# Altium integrated library GPDSE.IntLib: 426 symbols (part 2 of 5)
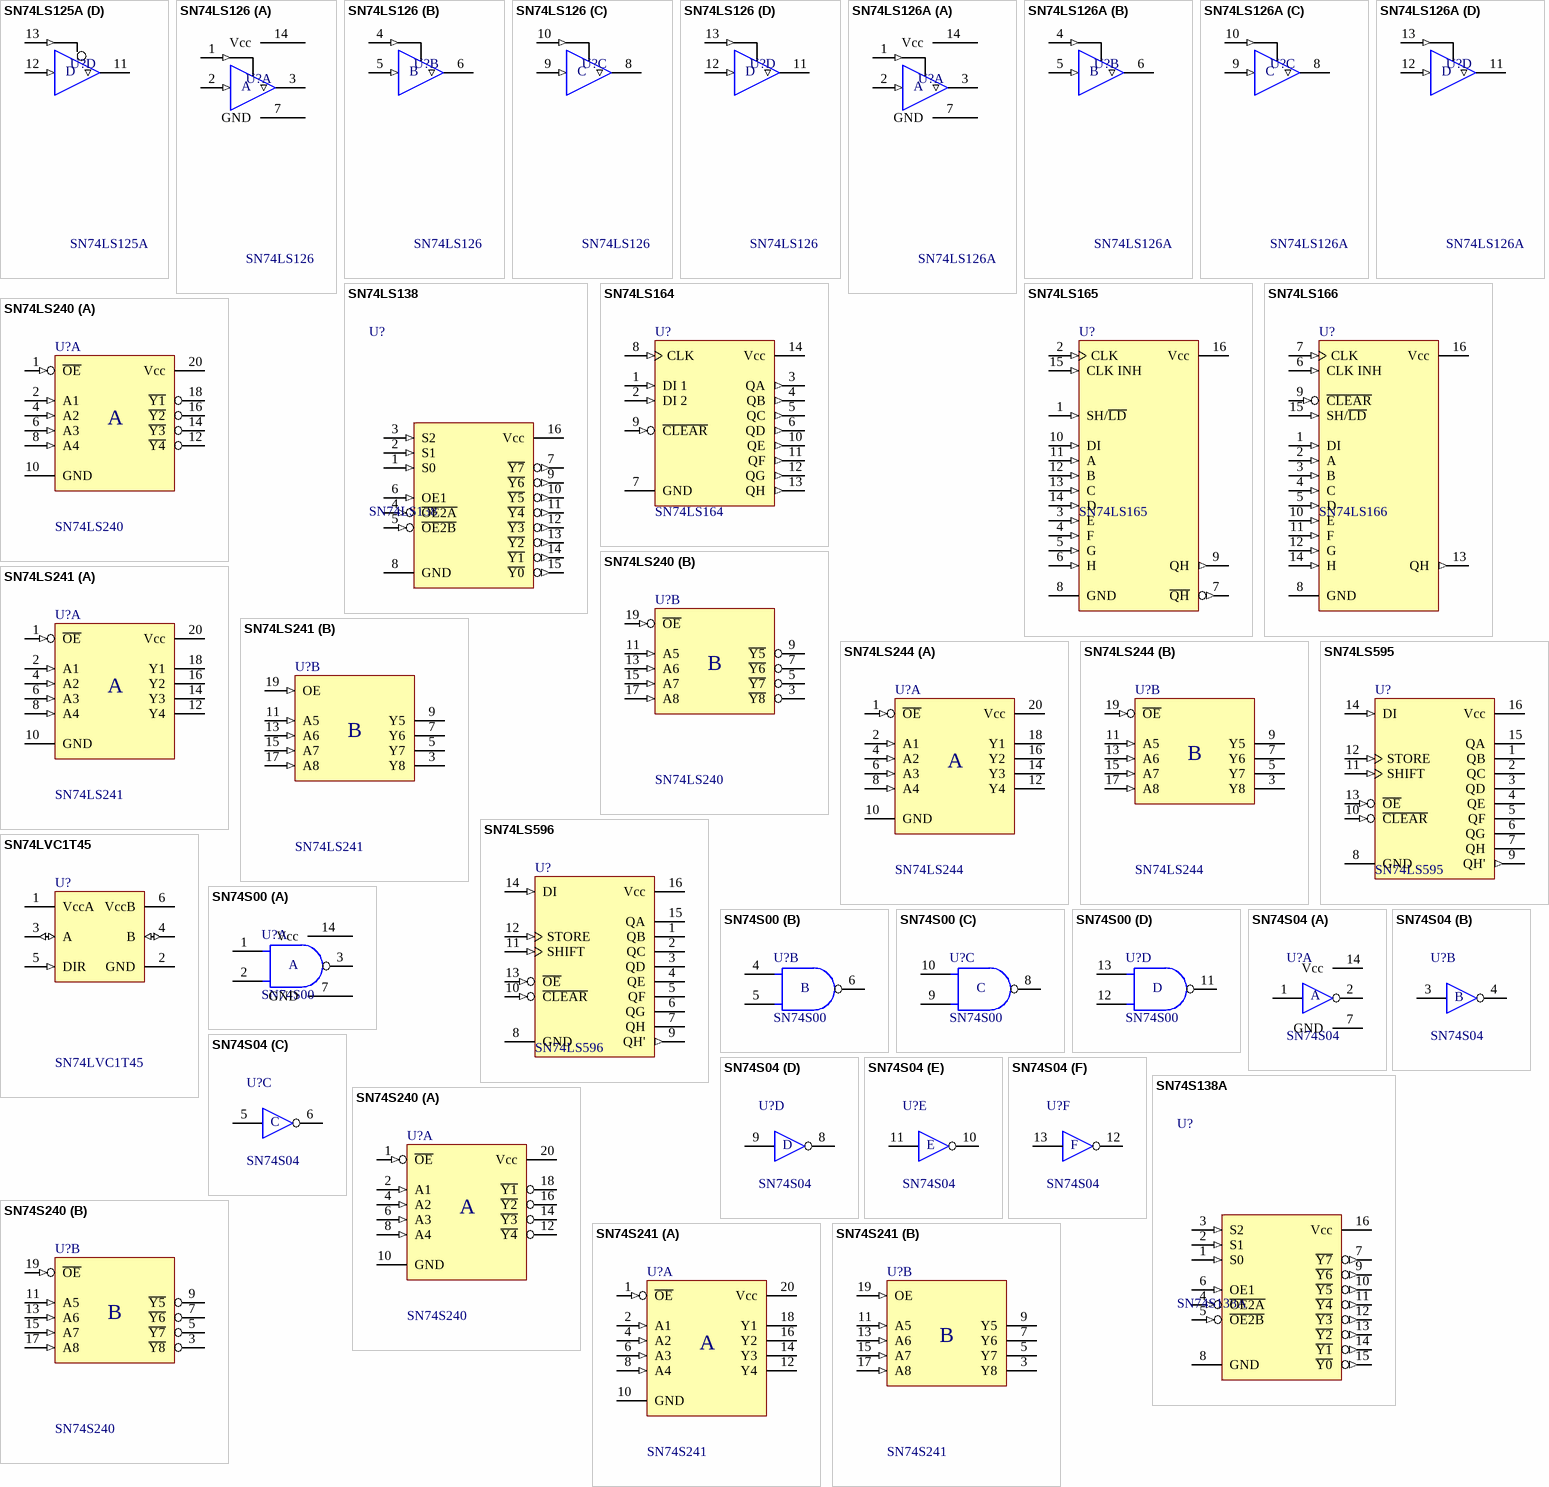
[diagram p27: symbols SN74LS125A to SN74S241]

## SN74LS166
designator U?
Parallel-Load 8-bit Shift Registers; Supply Voltage (Vcc): 4.75 to 5.25 V; Input Voltage (Vi): 0 to Vcc; Output High Current (Ioh): -0.8 mA; Output Low Current (Iol): 8 mA; Clock Frequency (fclock): 25 MHz; Output Voltage (Vo): 0 to Vcc
footprint DIP16-300(100) (DIP, 16-Leads, Row Spacing 7.62mm, Pitch 2.54mm, Body 22.86x6.35mm)
footprint SOIC16-150(50) (SOIC 16 Leads; Row Spacing 3.81 mm; Pitch 1.27 mm; 3D André L´Hérault)
footprint SOP16-5.3mm(1.27mm) (Small Outline Package 16 pin)
pins: 1 DI (in), 2 A (in), 3 B (in), 4 C (in), 5 D (in), 6 CLK INH (in), 7 CLK (in), 8 GND (power), 9 ~{CLEAR} (in), 10 E (in), 11 F (in), 12 G (in), 13 QH (out), 14 H (in), 15 SH/~{LD} (in), 16 Vcc (power)

## SN74LS240
designator U?
Octal Buffer/Driver with 3-State Outputs; Supply Voltage (Vcc): 4.75 to 5.25 V; Input Voltage (Vi): 0 to Vcc; Output High Current (Ioh): -15 mA; Output Low Current (Iol): 24 mA; Propagation Delay (tpd): 12ns; Output Voltage (Vo): 0 to Vcc
footprint SOIC20-300(50) (SOIC 20 Leads; Row Spacing 7.62 mm; Pitch 1.27 mm; 3D André L´Hérault)
footprint SOP20-5.3mm(1.27mm) (Footprint not found)
footprint DIP20-300(100) (Footprint not found)
footprint SOP20-5.3mm(0.65mm) (Small Outline Package 20 pin)
part A pins: 1 ~{OE} (in), 2 A1 (in), 4 A2 (in), 6 A3 (in), 8 A4 (in), 10 GND (power), 12 ~{Y4} (hiz), 14 ~{Y3} (hiz), 16 ~{Y2} (hiz), 18 ~{Y1} (hiz), 20 Vcc (power)
part B pins: 3 ~{Y8} (hiz), 5 ~{Y7} (hiz), 7 ~{Y6} (hiz), 9 ~{Y5} (hiz), 11 A5 (in), 13 A6 (in), 15 A7 (in), 17 A8 (in), 19 ~{OE} (in)
part A text: A
part B text: B

## SN74LS241
designator U?
Octal Buffer/Driver with 3-State Outputs; Supply Voltage (Vcc): 4.75 to 5.25 V; Input Voltage (Vi): 0 to Vcc; Output High Current (Ioh): -15 mA; Output Low Current (Iol): 24 mA; Propagation Delay (tpd): 12ns; Output Voltage (Vo): 0 to Vcc
footprint SOIC20-300(50) (SOIC 20 Leads; Row Spacing 7.62 mm; Pitch 1.27 mm; 3D André L´Hérault)
footprint SOP20-5.3mm(1.27mm) (Footprint not found)
footprint DIP20-300(100) (Footprint not found)
part A pins: 1 ~{OE} (in), 2 A1 (in), 4 A2 (in), 6 A3 (in), 8 A4 (in), 10 GND (power), 12 Y4 (hiz), 14 Y3 (hiz), 16 Y2 (hiz), 18 Y1 (hiz), 20 Vcc (power)
part B pins: 3 Y8 (hiz), 5 Y7 (hiz), 7 Y6 (hiz), 9 Y5 (hiz), 11 A5 (in), 13 A6 (in), 15 A7 (in), 17 A8 (in), 19 OE (in)
part A text: A
part B text: B

## SN74LS244
designator U?
Octal Buffer/Driver with 3-State Outputs; Supply Voltage (Vcc): 4.75 to 5.25 V; Input Voltage (Vi): 0 to Vcc; Output High Current (Ioh): -15 mA; Output Low Current (Iol): 24 mA; Propagation Delay (tpd): 12ns; Output Voltage (Vo): 0 to Vcc
footprint SOIC20-300(50) (SOIC 20 Leads; Row Spacing 7.62 mm; Pitch 1.27 mm; 3D André L´Hérault)
footprint SOP20-5.3mm(1.27mm) (Footprint not found)
footprint SOP20-5.3mm(0.65mm) (Small Outline Package 20 pin)
footprint DIP20-300(100) (Footprint not found)
part A pins: 1 ~{OE} (in), 2 A1 (in), 4 A2 (in), 6 A3 (in), 8 A4 (in), 10 GND (power), 12 Y4 (hiz), 14 Y3 (hiz), 16 Y2 (hiz), 18 Y1 (hiz), 20 Vcc (power)
part B pins: 3 Y8 (hiz), 5 Y7 (hiz), 7 Y6 (hiz), 9 Y5 (hiz), 11 A5 (in), 13 A6 (in), 15 A7 (in), 17 A8 (in), 19 ~{OE} (in)
part A text: A
part B text: B

## SN74LS595
designator U?
8-Bit Shift Register with 3-State Output Registers; Supply Voltage (Vcc): 4.75 to 5.25 V; Input Voltage (Vi): 0 to Vcc; Output High Current (Ioh): -2.6 mA; Output Low Current (Iol): 24 mA; Clock Frequency (fclock): 20 MHz; Output Voltage (Vo): 0 to Vcc
footprint SOIC16-150(50) (SOIC; 16 Leads; Row Spacing 3.81 mm; Pitch 1.27 mm; 3D Antonio Fagaldo)
footprint DIP16-300(100) (DIP, 16-Leads, Row Spacing 7.62mm, Pitch 2.54mm, Body 22.86x6.35mm)
pins: 1 QB (hiz), 2 QC (hiz), 3 QD (hiz), 4 QE (hiz), 5 QF (hiz), 6 QG (hiz), 7 QH (hiz), 8 GND (power), 9 QH' (out), 10 ~{CLEAR} (in), 11 SHIFT (in), 12 STORE (in), 13 ~{OE} (in), 14 DI (in), 15 QA (hiz), 16 Vcc (power)

## SN74LS596
designator U?
8-Bit Shift Register with Open Collector Output Registers; Supply Voltage (Vcc): 4.75 to 5.25 V; Input Voltage (Vi): 0 to Vcc; Output Low Current (Iol): 24 mA; Clock Frequency (fclock): 20 MHz; Output Voltage (Vo): 0 to Vcc; Output High Current (Ioh): N/A
footprint SOIC16-150(50) (SOIC; 16 Leads; Row Spacing 3.81 mm; Pitch 1.27 mm; 3D Antonio Fagaldo)
footprint DIP16-300(100) (DIP, 16-Leads, Row Spacing 7.62mm, Pitch 2.54mm, Body 22.86x6.35mm)
pins: 1 QB (hiz), 2 QC (hiz), 3 QD (hiz), 4 QE (hiz), 5 QF (hiz), 6 QG (hiz), 7 QH (hiz), 8 GND (power), 9 QH' (out), 10 ~{CLEAR} (in), 11 SHIFT (in), 12 STORE (in), 13 ~{OE} (in), 14 DI (in), 15 QA (hiz), 16 Vcc (power)

## SN74LVC1T45
designator U?
Single-Bit Dual-Supply Bus Transceiver with Configurable Voltage Translation and 3-State Outputs; Supply Voltage (Vcc): 1.65 to 5.5 V; Input Voltage (Vi): 0 to 6.5 V; Output Voltage (Vo): 0 to Vcc; Output High Current (Ioh): -24 mA; Output Low Current (Iol): 24 mA; Max Data Rate: 420 Mbps
footprint SOT-23/6 (Small Outline Transistor 6 leads)
pins: 1 VccA (power), 2 GND (power), 3 A (io), 4 B (io), 5 DIR (in), 6 VccB (power)

## SN74S00
designator U?
Quad 2-Input NAND Gate; Supply Voltage (Vcc): 4.75 to 5.25 V; Input Voltage (Vi): 0 to Vcc; Output High Current (Ioh): -1 mA; Output Low Current (Iol): 20 mA; Propagation Delay High-Low (tphl): 5ns; Propagation Delay Low-High (tplh): 4.5ns; Output Voltage (Vo): 0 to Vcc
footprint DIP14-300(100) (DIP, 14-Leads, Row Spacing 7.62mm, Pitch 2.54mm)
footprint SOIC14-150(50) (SOIC 14 Leads; Row Spacing 3.81 mm; Pitch 1.27 mm; 3D André L´Hérault)
footprint SOP14-5.3mm(1.27mm) (Small Outline Package 14 pin)
part A pins: 1 A0, 2 B0, 3 Y0, 7 GND, 14 Vcc
part B pins: 4 A1, 5 B1, 6 Y1
part C pins: 8 Y2, 9 B2, 10 A2
part D pins: 11 Y3, 12 B3, 13 A3
part A text: A
part B text: B
part C text: C
part D text: D

## SN74S04
designator U?
6x Logic Inverter; Input Voltage (Vi): 0 to Vcc; Output High Current (Ioh): -1 mA; Output Low Current (Iol): 20 mA; Propagation Delay High-Low (tphl): 5ns; Propagation Delay Low-High (tplh): 4.5ns; Supply Voltage (Vcc): 4.75 to 5.25 V; Output Voltage (Vo): 0 to Vcc
footprint DIP14-300(100) (DIP, 14-Leads, Row Spacing 7.62mm, Pitch 2.54mm)
footprint SOIC14-150(50) (Plastic Small Outline 14 pinos)
footprint SOP14-5.3mm(1.27mm) (Small Outline Package 14 pin)
part A pins: 1 2A, 2 2Y, 7 GND (power), 14 Vcc (power)
part B pins: 3 2A, 4 2Y
part C pins: 5 3A, 6 3Y
part D pins: 8 4Y, 9 4A
part E pins: 10 5Y, 11 5A
part F pins: 12 6Y, 13 6A
part A text: A
part B text: B
part C text: C
part D text: D
part E text: E
part F text: F

## SN74S138A
designator U?
3-Line to 8-Line Decoders; Output Voltage (Vo): 0 to Vcc; Supply Voltage (Vcc): 4.75 to 5.25 V; Propagation Delay High-Low (tphl): 8ns; Propagation Delay Low-High (tplh): 7.5ns; Output High Current (Ioh): -1 mA; Output Low Current (Iol): 20 mA; Input Voltage (Vi): 0 to Vcc
footprint DIP16-300(100) (Footprint not found)
footprint SOIC16-150(50) (Plastic Small Outline 16 pinos)
pins: 1 S0 (in), 2 S1 (in), 3 S2 (in), 4 ~{OE2A} (in), 5 ~{OE2B} (in), 6 OE1 (in), 7 ~{Y7} (out), 8 GND (power), 9 ~{Y6} (out), 10 ~{Y5} (out), 11 ~{Y4} (out), 12 ~{Y3} (out), 13 ~{Y2} (out), 14 ~{Y1} (out), 15 ~{Y0} (out), 16 Vcc (power)

## SN74S240
designator U?
Octal Buffer/Driver with 3-State Outputs; Supply Voltage (Vcc): 4.75 to 5.25 V; Input Voltage (Vi): 0 to Vcc; Output High Current (Ioh): -15 mA; Output Low Current (Iol): 64 mA; Propagation Delay (tpd): 10ns; Output Voltage (Vo): 0 to Vcc
footprint SOIC20-300(50) (SOIC 20 Leads; Row Spacing 7.62 mm; Pitch 1.27 mm; 3D André L´Hérault)
footprint DIP20-300(100) (Footprint not found)
part A pins: 1 ~{OE} (in), 2 A1 (in), 4 A2 (in), 6 A3 (in), 8 A4 (in), 10 GND (power), 12 ~{Y4} (hiz), 14 ~{Y3} (hiz), 16 ~{Y2} (hiz), 18 ~{Y1} (hiz), 20 Vcc (power)
part B pins: 3 ~{Y8} (hiz), 5 ~{Y7} (hiz), 7 ~{Y6} (hiz), 9 ~{Y5} (hiz), 11 A5 (in), 13 A6 (in), 15 A7 (in), 17 A8 (in), 19 ~{OE} (in)
part A text: A
part B text: B

## SN74S241
designator U?
Octal Buffer/Driver with 3-State Outputs; Supply Voltage (Vcc): 4.75 to 5.25 V; Input Voltage (Vi): 0 to Vcc; Output High Current (Ioh): -15 mA; Output Low Current (Iol): 64 mA; Propagation Delay (tpd): 10ns; Output Voltage (Vo): 0 to Vcc
footprint SOIC20-300(50) (SOIC 20 Leads; Row Spacing 7.62 mm; Pitch 1.27 mm; 3D André L´Hérault)
footprint DIP20-300(100) (Footprint not found)
part A pins: 1 ~{OE} (in), 2 A1 (in), 4 A2 (in), 6 A3 (in), 8 A4 (in), 10 GND (power), 12 Y4 (hiz), 14 Y3 (hiz), 16 Y2 (hiz), 18 Y1 (hiz), 20 Vcc (power)
part B pins: 3 Y8 (hiz), 5 Y7 (hiz), 7 Y6 (hiz), 9 Y5 (hiz), 11 A5 (in), 13 A6 (in), 15 A7 (in), 17 A8 (in), 19 OE (in)
part A text: A
part B text: B

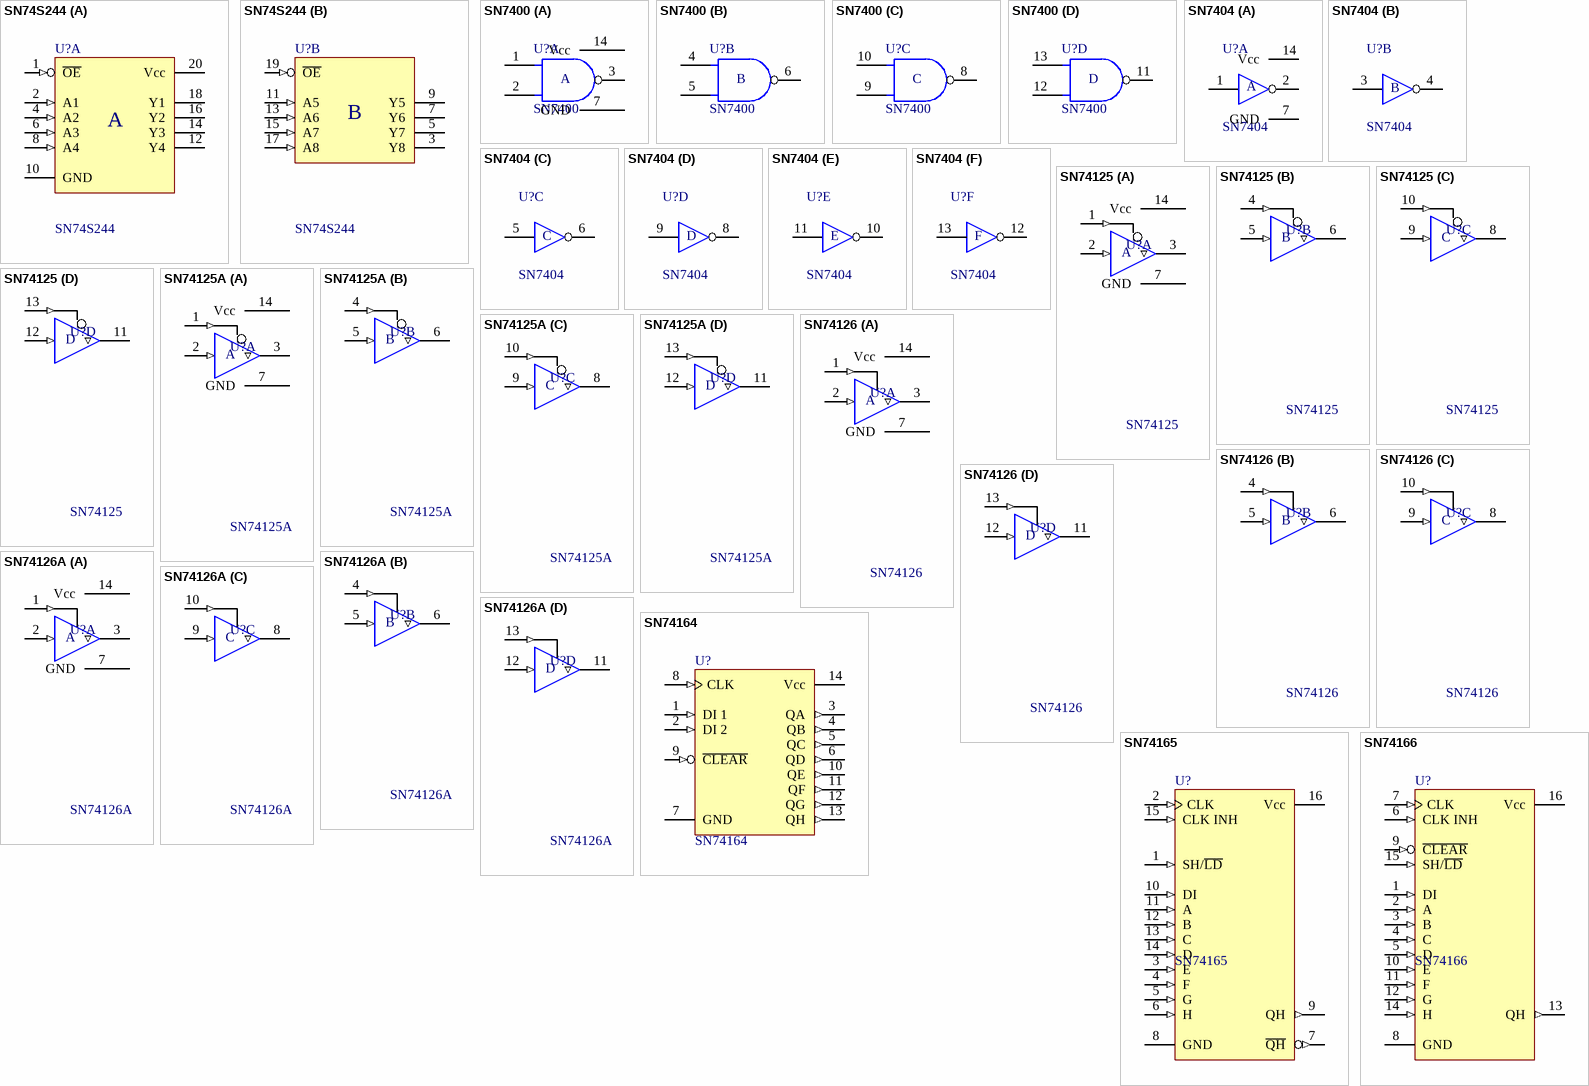
[diagram p5: symbols SN74S244 to SN74166]

## SN74S244
designator U?
Octal Buffer/Driver with 3-State Outputs; Supply Voltage (Vcc): 4.75 to 5.25 V; Input Voltage (Vi): 0 to Vcc; Output High Current (Ioh): -15 mA; Output Low Current (Iol): 64 mA; Propagation Delay (tpd): 10ns; Output Voltage (Vo): 0 to Vcc
footprint SOIC20-300(50) (SOIC 20 Leads; Row Spacing 7.62 mm; Pitch 1.27 mm; 3D André L´Hérault)
footprint DIP20-300(100) (Footprint not found)
part A pins: 1 ~{OE} (in), 2 A1 (in), 4 A2 (in), 6 A3 (in), 8 A4 (in), 10 GND (power), 12 Y4 (hiz), 14 Y3 (hiz), 16 Y2 (hiz), 18 Y1 (hiz), 20 Vcc (power)
part B pins: 3 Y8 (hiz), 5 Y7 (hiz), 7 Y6 (hiz), 9 Y5 (hiz), 11 A5 (in), 13 A6 (in), 15 A7 (in), 17 A8 (in), 19 ~{OE} (in)
part A text: A
part B text: B

## SN7400
designator U?
Quad 2-Input NAND Gate; Supply Voltage (Vcc): 4.75 to 5.25 V; Input Voltage (Vi): 0 to Vcc; Output High Current (Ioh): -0.4 mA; Output Low Current (Iol): 16 mA; Propagation Delay High-Low (tphl): 7ns; Propagation Delay Low-High (tplh): 11ns; Output Voltage (Vo): 0 to Vcc
footprint DIP14-300(100) (DIP, 14-Leads, Row Spacing 7.62mm, Pitch 2.54mm)
footprint SOIC14-150(50) (SOIC 14 Leads; Row Spacing 3.81 mm; Pitch 1.27 mm; 3D André L´Hérault)
footprint SOP14-5.3mm(1.27mm) (Small Outline Package 14 pin)
part A pins: 1 A0, 2 B0, 3 Y0, 7 GND, 14 Vcc
part B pins: 4 A1, 5 B1, 6 Y1
part C pins: 8 Y2, 9 B2, 10 A2
part D pins: 11 Y3, 12 B3, 13 A3
part A text: A
part B text: B
part C text: C
part D text: D

## SN7404
designator U?
6x Logic Inverter; Input Voltage (Vi): 0 to Vcc; Output High Current (Ioh): -0.4 mA; Output Low Current (Iol): 16 mA; Propagation Delay High-Low (tphl): 8ns; Propagation Delay Low-High (tplh): 12ns; Supply Voltage (Vcc): 4.75 to 5.25 V; Output Voltage (Vo): 0 to Vcc
footprint DIP14-300(100) (DIP, 14-Leads, Row Spacing 7.62mm, Pitch 2.54mm)
footprint SOIC14-150(50) (Plastic Small Outline 14 pinos)
footprint SOP14-5.3mm(1.27mm) (Small Outline Package 14 pin)
part A pins: 1 2A, 2 2Y, 7 GND (power), 14 Vcc (power)
part B pins: 3 2A, 4 2Y
part C pins: 5 3A, 6 3Y
part D pins: 8 4Y, 9 4A
part E pins: 10 5Y, 11 5A
part F pins: 12 6Y, 13 6A
part A text: A
part B text: B
part C text: C
part D text: D
part E text: E
part F text: F

## SN74125
designator U?
Quadruple Bus Buffer Gates with 3-State Outputs; Supply Voltage (Vcc): 4.75 to 5.25 V; Input Voltage (Vi): 0 to Vcc; Output High Current (Ioh): -2.6 mA; Output Low Current (Iol): 24 mA; Propagation Delay (tpd): 12ns; Output Voltage (Vo): 0 to Vcc
footprint DIP14-300(100) (DIP, 14-Leads, Row Spacing 7.62mm, Pitch 2.54mm)
part A pins: 1 ~{OE1} (in), 2 A1 (in), 3 Y1 (hiz), 7 GND, 14 Vcc
part B pins: 4 ~{OE2} (in), 5 A2 (in), 6 Y2 (hiz)
part C pins: 8 Y3 (hiz), 9 A3 (in), 10 ~{OE3} (in)
part D pins: 11 Y4 (hiz), 12 A4 (in), 13 ~{OE4} (in)
part A text: A
part B text: B
part C text: C
part D text: D

## SN74125A
designator U?
Quadruple Bus Buffer Gates with 3-State Outputs; Supply Voltage (Vcc): 4.75 to 5.25 V; Input Voltage (Vi): 0 to Vcc; Output High Current (Ioh): -2.6 mA; Output Low Current (Iol): 24 mA; Propagation Delay (tpd): 12ns; Output Voltage (Vo): 0 to Vcc
footprint DIP14-300(100) (DIP, 14-Leads, Row Spacing 7.62mm, Pitch 2.54mm)
footprint SOIC14-150(50) (SOIC 14 Leads; Row Spacing 3.81 mm; Pitch 1.27 mm; 3D André L´Hérault)
footprint SOP14-5.3mm(0.65mm) (Small Outline Package 14 pin)
footprint SOP14-5.3mm(1.27mm) (Small Outline Package 14 pin)
part A pins: 1 ~{OE1} (in), 2 A1 (in), 3 Y1 (hiz), 7 GND, 14 Vcc
part B pins: 4 ~{OE2} (in), 5 A2 (in), 6 Y2 (hiz)
part C pins: 8 Y3 (hiz), 9 A3 (in), 10 ~{OE3} (in)
part D pins: 11 Y4 (hiz), 12 A4 (in), 13 ~{OE4} (in)
part A text: A
part B text: B
part C text: C
part D text: D

## SN74126
designator U?
Quadruple Bus Buffer Gates with 3-State Outputs; Supply Voltage (Vcc): 4.75 to 5.25 V; Input Voltage (Vi): 0 to Vcc; Output High Current (Ioh): -2.6 mA; Output Low Current (Iol): 24 mA; Propagation Delay (tpd): 12ns; Output Voltage (Vo): 0 to Vcc
footprint DIP14-300(100) (DIP, 14-Leads, Row Spacing 7.62mm, Pitch 2.54mm)
part A pins: 1 OE1 (in), 2 A1 (in), 3 Y1 (hiz), 7 GND, 14 Vcc
part B pins: 4 OE2 (in), 5 A2 (in), 6 Y2 (hiz)
part C pins: 8 Y3 (hiz), 9 A3 (in), 10 OE3 (in)
part D pins: 11 Y4 (hiz), 12 A4 (in), 13 OE4 (in)
part A text: A
part B text: B
part C text: C
part D text: D

## SN74126A
designator U?
Quadruple Bus Buffer Gates with 3-State Outputs; Supply Voltage (Vcc): 4.75 to 5.25 V; Input Voltage (Vi): 0 to Vcc; Output High Current (Ioh): -2.6 mA; Output Low Current (Iol): 24 mA; Propagation Delay (tpd): 12ns; Output Voltage (Vo): 0 to Vcc
footprint DIP14-300(100) (DIP, 14-Leads, Row Spacing 7.62mm, Pitch 2.54mm)
footprint SOIC14-150(50) (SOIC 14 Leads; Row Spacing 3.81 mm; Pitch 1.27 mm; 3D André L´Hérault)
footprint SOP14-5.3mm(1.27mm) (Small Outline Package 14 pin)
part A pins: 1 OE1 (in), 2 A1 (in), 3 Y1 (hiz), 7 GND, 14 Vcc
part B pins: 4 OE2 (in), 5 A2 (in), 6 Y2 (hiz)
part C pins: 8 Y3 (hiz), 9 A3 (in), 10 OE3 (in)
part D pins: 11 Y4 (hiz), 12 A4 (in), 13 OE4 (in)
part A text: A
part B text: B
part C text: C
part D text: D

## SN74164
designator U?
8-bit Parallel-Out Serial Shift Registers; Supply Voltage (Vcc): 4.75 to 5.25 V; Input Voltage (Vi): 0 to Vcc; Output High Current (Ioh): -0.8 mA; Output Low Current (Iol): 16 mA; Clock Frequency (fclock): 20 MHz; Output Voltage (Vo): 0 to Vcc
footprint DIP14-300(100) (DIP, 14-Leads, Row Spacing 7.62mm, Pitch 2.54mm)
pins: 1 DI 1 (in), 2 DI 2 (in), 3 QA (out), 4 QB (out), 5 QC (out), 6 QD (out), 7 GND (power), 8 CLK (in), 9 ~{CLEAR} (in), 10 QE (out), 11 QF (out), 12 QG (out), 13 QH (out), 14 Vcc (power)

## SN74165
designator U?
Parallel-Load 8-bit Shift Registers; Supply Voltage (Vcc): 4.75 to 5.25 V; Input Voltage (Vi): 0 to Vcc; Output High Current (Ioh): -0.8 mA; Output Low Current (Iol): 16 mA; Clock Frequency (fclock): 20 MHz; Output Voltage (Vo): 0 to Vcc
footprint DIP16-300(100) (DIP, 16-Leads, Row Spacing 7.62mm, Pitch 2.54mm, Body 22.86x6.35mm)
pins: 1 SH/~{LD} (in), 2 CLK (in), 3 E (in), 4 F (in), 5 G (in), 6 H (in), 7 ~{QH} (out), 8 GND (power), 9 QH (out), 10 DI (in), 11 A (in), 12 B (in), 13 C (in), 14 D (in), 15 CLK INH (in), 16 Vcc (power)

## SN74166
designator U?
Parallel-Load 8-bit Shift Registers; Supply Voltage (Vcc): 4.75 to 5.25 V; Input Voltage (Vi): 0 to Vcc; Output High Current (Ioh): -0.8 mA; Output Low Current (Iol): 16 mA; Clock Frequency (fclock): 20 MHz; Output Voltage (Vo): 0 to Vcc
footprint DIP16-300(100) (DIP, 16-Leads, Row Spacing 7.62mm, Pitch 2.54mm, Body 22.86x6.35mm)
pins: 1 DI (in), 2 A (in), 3 B (in), 4 C (in), 5 D (in), 6 CLK INH (in), 7 CLK (in), 8 GND (power), 9 ~{CLEAR} (in), 10 E (in), 11 F (in), 12 G (in), 13 QH (out), 14 H (in), 15 SH/~{LD} (in), 16 Vcc (power)


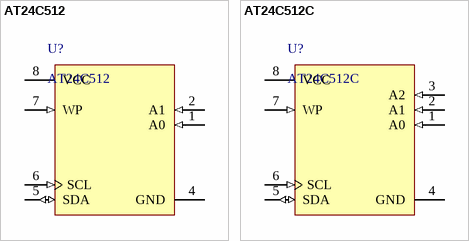
[diagram p6: symbols AT24C512 to AT24C512C]

## AT24C512
designator U?
I2C Serial EEPROM 512 Kb (65,536x8); Vcc: 1.7-5.5 V; Max. Clock: 400 kHz
footprint SOP08-4.4mm(0.65mm) (Thin Shrink Small Outline Package 8 pin)
footprint SOIC08-150(50) (SOIC 8 Leads; Row Spacing 3.81 mm; Pitch 1.27 mm; 3D André L´Hérault)
footprint DIP08-300(100) (DIP; 8 Leads; Row Spacing 7.62 mm; Pitch 2.54 mm)
pins: 1 A0 (in), 2 A1 (in), 4 GND (power), 5 SDA (io), 6 SCL (in), 7 WP (in), 8 VCC (power)

## AT24C512C
designator U?
I2C Serial EEPROM 512 Kb (65,536x8); Vcc: 1.7-5.5 V; Max. Clock: 400 kHz
footprint SOP08-4.4mm(0.65mm) (Thin Shrink Small Outline Package 8 pin)
footprint SOIC08-150(50) (SOIC 8 Leads; Row Spacing 3.81 mm; Pitch 1.27 mm; 3D André L´Hérault)
pins: 1 A0 (in), 2 A1 (in), 3 A2 (in), 4 GND (power), 5 SDA (io), 6 SCL (in), 7 WP (in), 8 VCC (power)


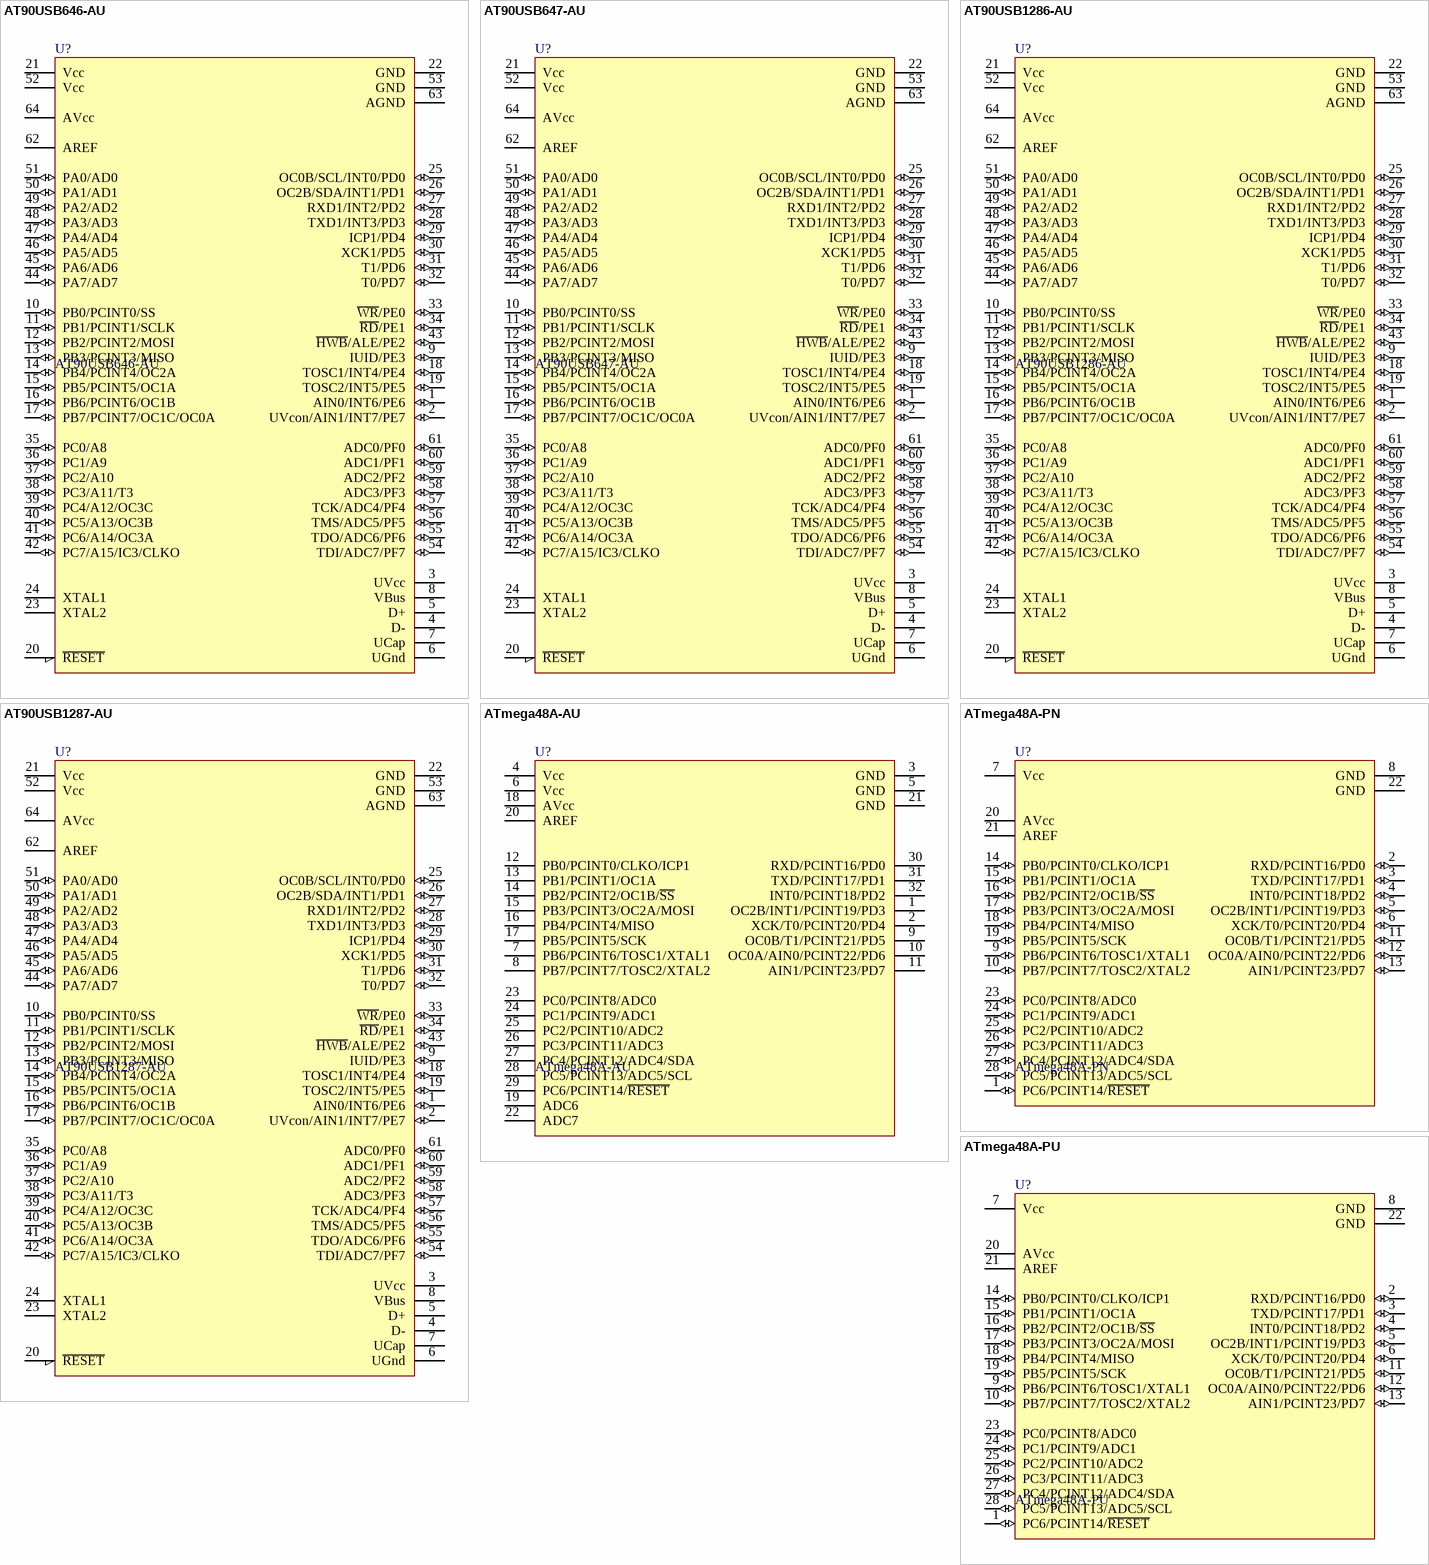
[diagram p7: symbols AT90USB646-AU to ATmega48A-PU]

## AT90USB646-AU
designator U?
8-bit Microcontroller with 64 KB of ISP Flash and USB Controller; ADC Channel: 8; Analog Comparator: 1; Clock Frequency: 0 - 16 MHz; EEPROM Memory: 2 KB; Flash Memory: 64 KB; I/O Pins: 48; PWM Channel: 10; SRAM Memory: 4 KB; Supply Voltage (Vdd): 2.7 - 5.5 V; Timer 8 bits: 2; Debug: JTAG; USB Function: Device; Serial I2C: 1; Serial SPI: 1; Serial USART: 1; Timer 16 bits: 2; USB Controller: 1
footprint TQFP64-14mm(0.8mm) (Thin Quad Flat Pack 64 pinos)
pins: 1 AIN0/INT6/PE6 (io), 2 UVcon/AIN1/INT7/PE7 (io), 3 UVcc, 4 D-, 5 D+, 6 UGnd, 7 UCap, 8 VBus, 9 IUID/PE3 (io), 10 PB0/PCINT0/SS (io), 11 PB1/PCINT1/SCLK (io), 12 PB2/PCINT2/MOSI (io), 13 PB3/PCINT3/MISO (io), 14 PB4/PCINT4/OC2A (io), 15 PB5/PCINT5/OC1A (io), 16 PB6/PCINT6/OC1B (io), 17 PB7/PCINT7/OC1C/OC0A (io), 18 TOSC1/INT4/PE4 (io), 19 TOSC2/INT5/PE5 (io), 20 ~{RESET}, 21 Vcc, 22 GND, 23 XTAL2, 24 XTAL1, 25 OC0B/SCL/INT0/PD0 (io), 26 OC2B/SDA/INT1/PD1 (io), 27 RXD1/INT2/PD2 (io), 28 TXD1/INT3/PD3 (io), 29 ICP1/PD4 (io), 30 XCK1/PD5 (io), 31 T1/PD6 (io), 32 T0/PD7 (io), 33 ~{WR}/PE0 (io), 34 ~{RD}/PE1 (io), 35 PC0/A8 (io), 36 PC1/A9 (io), 37 PC2/A10 (io), 38 PC3/A11/T3 (io), 39 PC4/A12/OC3C (io), 40 PC5/A13/OC3B (io), 41 PC6/A14/OC3A (io), 42 PC7/A15/IC3/CLKO (io), 43 ~{HWB}/ALE/PE2 (io), 44 PA7/AD7 (io), 45 PA6/AD6 (io), 46 PA5/AD5 (io), 47 PA4/AD4 (io), 48 PA3/AD3 (io), 49 PA2/AD2 (io), 50 PA1/AD1 (io), 51 PA0/AD0 (io), 52 Vcc, 53 GND, 54 TDI/ADC7/PF7 (io), 55 TDO/ADC6/PF6 (io), 56 TMS/ADC5/PF5 (io), 57 TCK/ADC4/PF4 (io), 58 ADC3/PF3 (io), 59 ADC2/PF2 (io), 60 ADC1/PF1 (io), 61 ADC0/PF0 (io), 62 AREF, 63 AGND, 64 AVcc

## AT90USB647-AU
designator U?
8-bit Microcontroller with 64 KB of ISP Flash and USB Controller; ADC Channel: 8; Analog Comparator: 1; Clock Frequency: 0 - 16 MHz; EEPROM Memory: 2 KB; Flash Memory: 64 KB; I/O Pins: 48; PWM Channel: 10; SRAM Memory: 4 KB; Supply Voltage (Vdd): 2.7 - 5.5 V; Timer 8 bits: 2; Debug: JTAG; USB Function: OTG; Serial I2C: 1; Serial SPI: 1; Serial USART: 1; Timer 16 bits: 2; USB Controller: 1
footprint TQFP64-14mm(0.8mm) (Thin Quad Flat Pack 64 pinos)
pins: 1 AIN0/INT6/PE6 (io), 2 UVcon/AIN1/INT7/PE7 (io), 3 UVcc, 4 D-, 5 D+, 6 UGnd, 7 UCap, 8 VBus, 9 IUID/PE3 (io), 10 PB0/PCINT0/SS (io), 11 PB1/PCINT1/SCLK (io), 12 PB2/PCINT2/MOSI (io), 13 PB3/PCINT3/MISO (io), 14 PB4/PCINT4/OC2A (io), 15 PB5/PCINT5/OC1A (io), 16 PB6/PCINT6/OC1B (io), 17 PB7/PCINT7/OC1C/OC0A (io), 18 TOSC1/INT4/PE4 (io), 19 TOSC2/INT5/PE5 (io), 20 ~{RESET}, 21 Vcc, 22 GND, 23 XTAL2, 24 XTAL1, 25 OC0B/SCL/INT0/PD0 (io), 26 OC2B/SDA/INT1/PD1 (io), 27 RXD1/INT2/PD2 (io), 28 TXD1/INT3/PD3 (io), 29 ICP1/PD4 (io), 30 XCK1/PD5 (io), 31 T1/PD6 (io), 32 T0/PD7 (io), 33 ~{WR}/PE0 (io), 34 ~{RD}/PE1 (io), 35 PC0/A8 (io), 36 PC1/A9 (io), 37 PC2/A10 (io), 38 PC3/A11/T3 (io), 39 PC4/A12/OC3C (io), 40 PC5/A13/OC3B (io), 41 PC6/A14/OC3A (io), 42 PC7/A15/IC3/CLKO (io), 43 ~{HWB}/ALE/PE2 (io), 44 PA7/AD7 (io), 45 PA6/AD6 (io), 46 PA5/AD5 (io), 47 PA4/AD4 (io), 48 PA3/AD3 (io), 49 PA2/AD2 (io), 50 PA1/AD1 (io), 51 PA0/AD0 (io), 52 Vcc, 53 GND, 54 TDI/ADC7/PF7 (io), 55 TDO/ADC6/PF6 (io), 56 TMS/ADC5/PF5 (io), 57 TCK/ADC4/PF4 (io), 58 ADC3/PF3 (io), 59 ADC2/PF2 (io), 60 ADC1/PF1 (io), 61 ADC0/PF0 (io), 62 AREF, 63 AGND, 64 AVcc

## AT90USB1286-AU
designator U?
8-bit Microcontroller with 124 KB of ISP Flash and USB Controller; ADC Channel: 8; Analog Comparator: 1; Clock Frequency: 0 - 16 MHz; EEPROM Memory: 4 KB; Flash Memory: 128 KB; I/O Pins: 48; PWM Channel: 10; SRAM Memory: 8 KB; Supply Voltage (Vdd): 2.7 - 5.5 V; Timer 8 bits: 2; Debug: JTAG; USB Function: Device; Serial I2C: 1; Serial SPI: 1; Serial USART: 1; Timer 16 bits: 2; USB Controller: 1
footprint TQFP64-14mm(0.8mm) (Thin Quad Flat Pack 64 pinos)
pins: 1 AIN0/INT6/PE6 (io), 2 UVcon/AIN1/INT7/PE7 (io), 3 UVcc, 4 D-, 5 D+, 6 UGnd, 7 UCap, 8 VBus, 9 IUID/PE3 (io), 10 PB0/PCINT0/SS (io), 11 PB1/PCINT1/SCLK (io), 12 PB2/PCINT2/MOSI (io), 13 PB3/PCINT3/MISO (io), 14 PB4/PCINT4/OC2A (io), 15 PB5/PCINT5/OC1A (io), 16 PB6/PCINT6/OC1B (io), 17 PB7/PCINT7/OC1C/OC0A (io), 18 TOSC1/INT4/PE4 (io), 19 TOSC2/INT5/PE5 (io), 20 ~{RESET}, 21 Vcc, 22 GND, 23 XTAL2, 24 XTAL1, 25 OC0B/SCL/INT0/PD0 (io), 26 OC2B/SDA/INT1/PD1 (io), 27 RXD1/INT2/PD2 (io), 28 TXD1/INT3/PD3 (io), 29 ICP1/PD4 (io), 30 XCK1/PD5 (io), 31 T1/PD6 (io), 32 T0/PD7 (io), 33 ~{WR}/PE0 (io), 34 ~{RD}/PE1 (io), 35 PC0/A8 (io), 36 PC1/A9 (io), 37 PC2/A10 (io), 38 PC3/A11/T3 (io), 39 PC4/A12/OC3C (io), 40 PC5/A13/OC3B (io), 41 PC6/A14/OC3A (io), 42 PC7/A15/IC3/CLKO (io), 43 ~{HWB}/ALE/PE2 (io), 44 PA7/AD7 (io), 45 PA6/AD6 (io), 46 PA5/AD5 (io), 47 PA4/AD4 (io), 48 PA3/AD3 (io), 49 PA2/AD2 (io), 50 PA1/AD1 (io), 51 PA0/AD0 (io), 52 Vcc, 53 GND, 54 TDI/ADC7/PF7 (io), 55 TDO/ADC6/PF6 (io), 56 TMS/ADC5/PF5 (io), 57 TCK/ADC4/PF4 (io), 58 ADC3/PF3 (io), 59 ADC2/PF2 (io), 60 ADC1/PF1 (io), 61 ADC0/PF0 (io), 62 AREF, 63 AGND, 64 AVcc

## AT90USB1287-AU
designator U?
8-bit Microcontroller with 128 KB of ISP Flash and USB Controller; ADC Channel: 8; Analog Comparator: 1; Clock Frequency: 0 - 16 MHz; EEPROM Memory: 4 KB; Flash Memory: 128 KB; I/O Pins: 48; PWM Channel: 10; SRAM Memory: 8 KB; Supply Voltage (Vdd): 2.7 - 5.5 V; Timer 8 bits: 2; Debug: JTAG; USB Function: OTG; Serial I2C: 1; Serial SPI: 1; Serial USART: 1; Timer 16 bits: 2; USB Controller: 1
footprint TQFP64-14mm(0.8mm) (Thin Quad Flat Pack 64 pinos)
pins: 1 AIN0/INT6/PE6 (io), 2 UVcon/AIN1/INT7/PE7 (io), 3 UVcc, 4 D-, 5 D+, 6 UGnd, 7 UCap, 8 VBus, 9 IUID/PE3 (io), 10 PB0/PCINT0/SS (io), 11 PB1/PCINT1/SCLK (io), 12 PB2/PCINT2/MOSI (io), 13 PB3/PCINT3/MISO (io), 14 PB4/PCINT4/OC2A (io), 15 PB5/PCINT5/OC1A (io), 16 PB6/PCINT6/OC1B (io), 17 PB7/PCINT7/OC1C/OC0A (io), 18 TOSC1/INT4/PE4 (io), 19 TOSC2/INT5/PE5 (io), 20 ~{RESET}, 21 Vcc, 22 GND, 23 XTAL2, 24 XTAL1, 25 OC0B/SCL/INT0/PD0 (io), 26 OC2B/SDA/INT1/PD1 (io), 27 RXD1/INT2/PD2 (io), 28 TXD1/INT3/PD3 (io), 29 ICP1/PD4 (io), 30 XCK1/PD5 (io), 31 T1/PD6 (io), 32 T0/PD7 (io), 33 ~{WR}/PE0 (io), 34 ~{RD}/PE1 (io), 35 PC0/A8 (io), 36 PC1/A9 (io), 37 PC2/A10 (io), 38 PC3/A11/T3 (io), 39 PC4/A12/OC3C (io), 40 PC5/A13/OC3B (io), 41 PC6/A14/OC3A (io), 42 PC7/A15/IC3/CLKO (io), 43 ~{HWB}/ALE/PE2 (io), 44 PA7/AD7 (io), 45 PA6/AD6 (io), 46 PA5/AD5 (io), 47 PA4/AD4 (io), 48 PA3/AD3 (io), 49 PA2/AD2 (io), 50 PA1/AD1 (io), 51 PA0/AD0 (io), 52 Vcc, 53 GND, 54 TDI/ADC7/PF7 (io), 55 TDO/ADC6/PF6 (io), 56 TMS/ADC5/PF5 (io), 57 TCK/ADC4/PF4 (io), 58 ADC3/PF3 (io), 59 ADC2/PF2 (io), 60 ADC1/PF1 (io), 61 ADC0/PF0 (io), 62 AREF, 63 AGND, 64 AVcc

## ATmega48A-AU
designator U?
8-bit AVR Microcontroller with 4 KB In-System Programmable Flash; Flash Memory: 4 KB; EEPROM Memory: 256 B; SRAM Memory: 512 B; Timer 8 bits: 2; Timer 16 bits: 1; PWM Channel: 6; ADC Channel: 8; I/O Pins: 23; Supply Voltage (Vdd): 1.8 - 5.5 V; Clock Frequency: 0 - 20 MHz; Debug: debugWire; Serial USART: 1; Serial SPI: 1; Serial I2C: 1; Analog Comparator: 1
footprint TQFP32-7.0mm(0.8mm) (Thin Quad Flat Pack 32 pin; 3D André L'Hérault)
pins: 1 OC2B/INT1/PCINT19/PD3, 2 XCK/T0/PCINT20/PD4, 3 GND, 4 Vcc, 5 GND, 6 Vcc, 7 PB6/PCINT6/TOSC1/XTAL1, 8 PB7/PCINT7/TOSC2/XTAL2, 9 OC0B/T1/PCINT21/PD5, 10 OC0A/AIN0/PCINT22/PD6, 11 AIN1/PCINT23/PD7, 12 PB0/PCINT0/CLKO/ICP1, 13 PB1/PCINT1/OC1A, 14 PB2/PCINT2/OC1B/~{SS}, 15 PB3/PCINT3/OC2A/MOSI, 16 PB4/PCINT4/MISO, 17 PB5/PCINT5/SCK, 18 AVcc, 19 ADC6, 20 AREF, 21 GND, 22 ADC7, 23 PC0/PCINT8/ADC0, 24 PC1/PCINT9/ADC1, 25 PC2/PCINT10/ADC2, 26 PC3/PCINT11/ADC3, 27 PC4/PCINT12/ADC4/SDA, 28 PC5/PCINT13/ADC5/SCL, 29 PC6/PCINT14/~{RESET}, 30 RXD/PCINT16/PD0, 31 TXD/PCINT17/PD1, 32 INT0/PCINT18/PD2

## ATmega48A-PN
designator U?
8-bit AVR Microcontroller with 4 KB In-System Programmable Flash; Flash Memory: 4 KB; EEPROM Memory: 256 B; SRAM Memory: 512 B; Timer 8 bits: 2; Timer 16 bits: 1; PWM Channel: 6; I/O Pins: 23; Supply Voltage (Vdd): 1.8 - 5.5 V; Clock Frequency: 0 - 20 MHz; Debug: debugWire; ADC Channel: 6; Serial USART: 1; Serial SPI: 1; Serial I2C: 1; Analog Comparator: 1
footprint DIP28-300(100) (DIP, 28-Leads, Row Spacing 7.62mm, Pitch 2.54mm, Body 34.67x7.3mm)
pins: 1 PC6/PCINT14/~{RESET} (io), 2 RXD/PCINT16/PD0 (io), 3 TXD/PCINT17/PD1 (io), 4 INT0/PCINT18/PD2 (io), 5 OC2B/INT1/PCINT19/PD3 (io), 6 XCK/T0/PCINT20/PD4 (io), 7 Vcc, 8 GND, 9 PB6/PCINT6/TOSC1/XTAL1 (io), 10 PB7/PCINT7/TOSC2/XTAL2 (io), 11 OC0B/T1/PCINT21/PD5 (io), 12 OC0A/AIN0/PCINT22/PD6 (io), 13 AIN1/PCINT23/PD7 (io), 14 PB0/PCINT0/CLKO/ICP1 (io), 15 PB1/PCINT1/OC1A (io), 16 PB2/PCINT2/OC1B/~{SS} (io), 17 PB3/PCINT3/OC2A/MOSI (io), 18 PB4/PCINT4/MISO (io), 19 PB5/PCINT5/SCK (io), 20 AVcc, 21 AREF, 22 GND, 23 PC0/PCINT8/ADC0 (io), 24 PC1/PCINT9/ADC1 (io), 25 PC2/PCINT10/ADC2 (io), 26 PC3/PCINT11/ADC3 (io), 27 PC4/PCINT12/ADC4/SDA (io), 28 PC5/PCINT13/ADC5/SCL (io)

## ATmega48A-PU
designator U?
8-bit AVR Microcontroller with 4 KB In-System Programmable Flash; Flash Memory: 4 KB; EEPROM Memory: 256 B; SRAM Memory: 512 B; Timer 8 bits: 2; Timer 16 bits: 1; PWM Channel: 6; I/O Pins: 23; Supply Voltage (Vdd): 1.8 - 5.5 V; Clock Frequency: 0 - 20 MHz; Debug: debugWire; ADC Channel: 6; Serial USART: 1; Serial SPI: 1; Serial I2C: 1; Analog Comparator: 1
footprint DIP28-300(100) (DIP, 28-Leads, Row Spacing 7.62mm, Pitch 2.54mm, Body 34.67x7.3mm)
pins: 1 PC6/PCINT14/~{RESET} (io), 2 RXD/PCINT16/PD0 (io), 3 TXD/PCINT17/PD1 (io), 4 INT0/PCINT18/PD2 (io), 5 OC2B/INT1/PCINT19/PD3 (io), 6 XCK/T0/PCINT20/PD4 (io), 7 Vcc, 8 GND, 9 PB6/PCINT6/TOSC1/XTAL1 (io), 10 PB7/PCINT7/TOSC2/XTAL2 (io), 11 OC0B/T1/PCINT21/PD5 (io), 12 OC0A/AIN0/PCINT22/PD6 (io), 13 AIN1/PCINT23/PD7 (io), 14 PB0/PCINT0/CLKO/ICP1 (io), 15 PB1/PCINT1/OC1A (io), 16 PB2/PCINT2/OC1B/~{SS} (io), 17 PB3/PCINT3/OC2A/MOSI (io), 18 PB4/PCINT4/MISO (io), 19 PB5/PCINT5/SCK (io), 20 AVcc, 21 AREF, 22 GND, 23 PC0/PCINT8/ADC0 (io), 24 PC1/PCINT9/ADC1 (io), 25 PC2/PCINT10/ADC2 (io), 26 PC3/PCINT11/ADC3 (io), 27 PC4/PCINT12/ADC4/SDA (io), 28 PC5/PCINT13/ADC5/SCL (io)

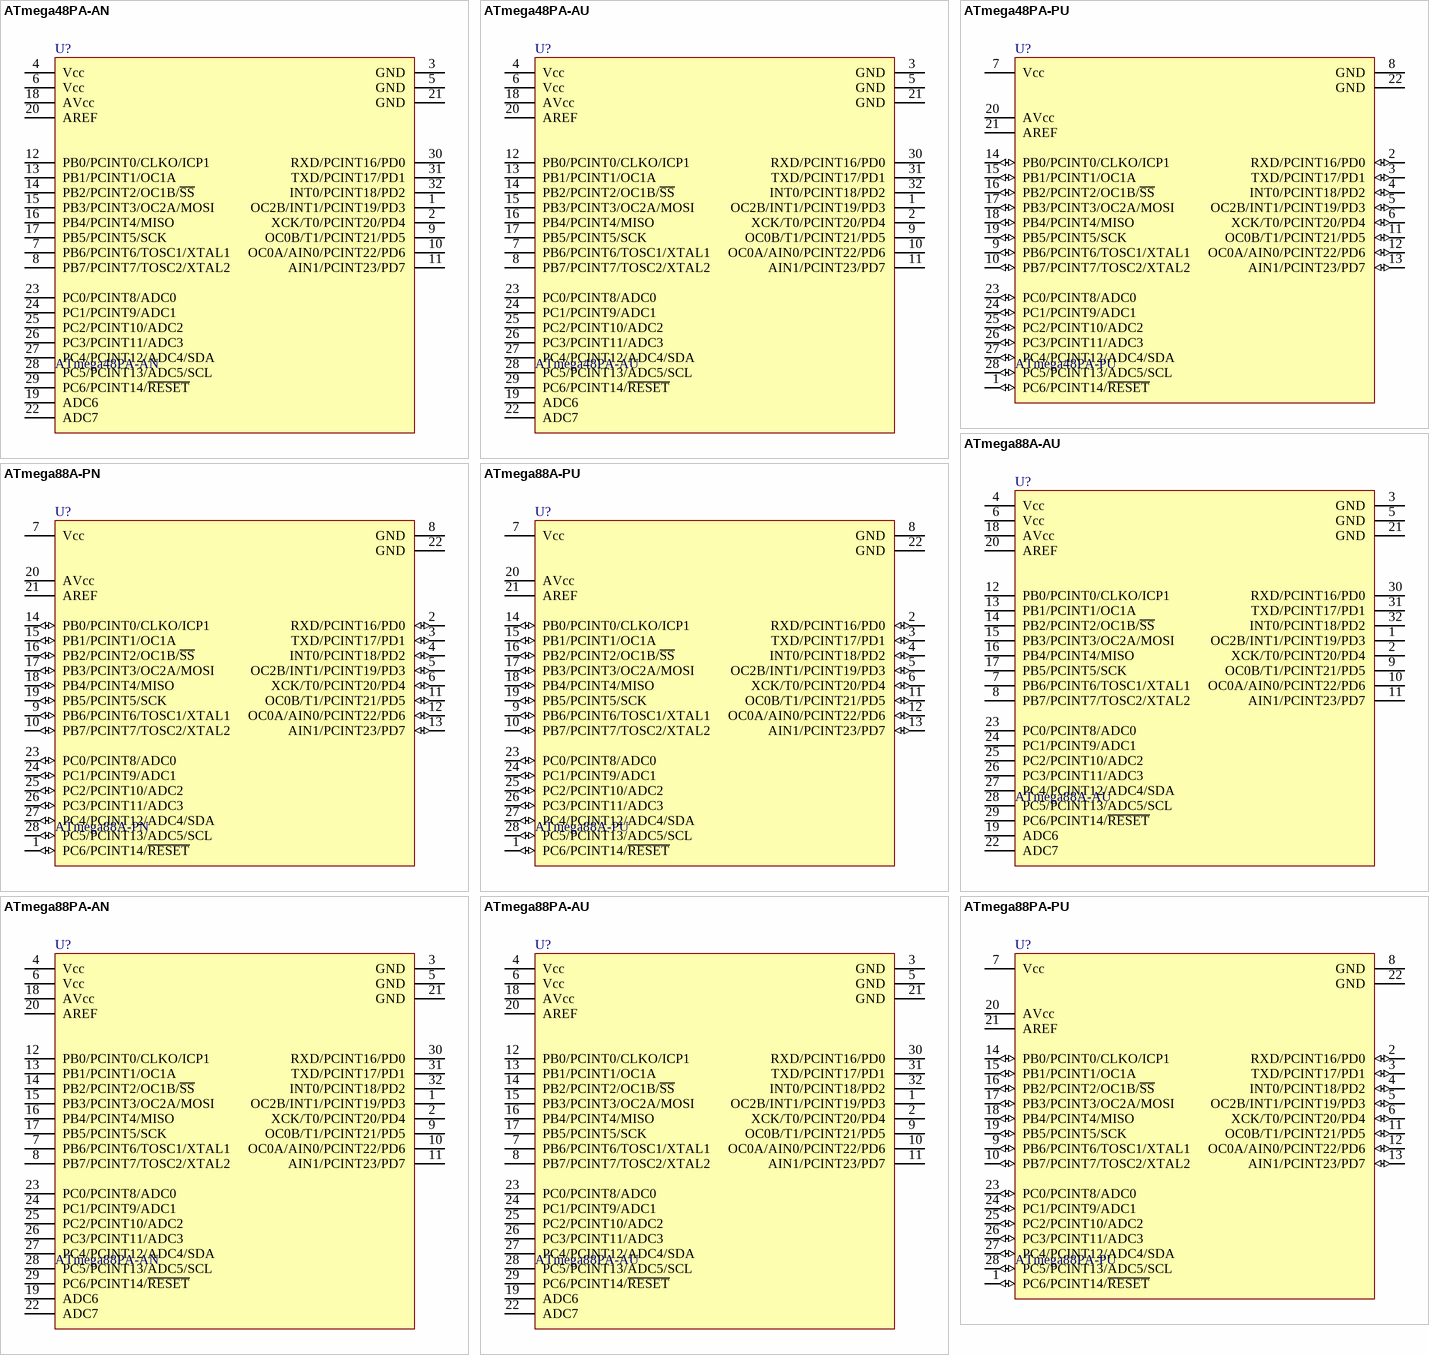
[diagram p8: symbols ATmega48PA-AN to ATmega88PA-PU]

## ATmega48PA-AN
designator U?
8-bit AVR Microcontroller with 4 KB In-System Programmable Flash; Flash Memory: 4 KB; EEPROM Memory: 256 B; SRAM Memory: 512 B; Timer 8 bits: 2; Timer 16 bits: 1; PWM Channel: 6; ADC Channel: 8; I/O Pins: 23; Supply Voltage (Vdd): 1.8 - 5.5 V; Clock Frequency: 0 - 20 MHz; Debug: debugWire; Serial USART: 1; Serial SPI: 1; Serial I2C: 1; Analog Comparator: 1
footprint TQFP32-7.0mm(0.8mm) (Thin Quad Flat Pack 32 pin; 3D André L'Hérault)
pins: 1 OC2B/INT1/PCINT19/PD3, 2 XCK/T0/PCINT20/PD4, 3 GND, 4 Vcc, 5 GND, 6 Vcc, 7 PB6/PCINT6/TOSC1/XTAL1, 8 PB7/PCINT7/TOSC2/XTAL2, 9 OC0B/T1/PCINT21/PD5, 10 OC0A/AIN0/PCINT22/PD6, 11 AIN1/PCINT23/PD7, 12 PB0/PCINT0/CLKO/ICP1, 13 PB1/PCINT1/OC1A, 14 PB2/PCINT2/OC1B/~{SS}, 15 PB3/PCINT3/OC2A/MOSI, 16 PB4/PCINT4/MISO, 17 PB5/PCINT5/SCK, 18 AVcc, 19 ADC6, 20 AREF, 21 GND, 22 ADC7, 23 PC0/PCINT8/ADC0, 24 PC1/PCINT9/ADC1, 25 PC2/PCINT10/ADC2, 26 PC3/PCINT11/ADC3, 27 PC4/PCINT12/ADC4/SDA, 28 PC5/PCINT13/ADC5/SCL, 29 PC6/PCINT14/~{RESET}, 30 RXD/PCINT16/PD0, 31 TXD/PCINT17/PD1, 32 INT0/PCINT18/PD2

## ATmega48PA-AU
designator U?
8-bit AVR Microcontroller with 4 KB In-System Programmable Flash; Flash Memory: 4 KB; EEPROM Memory: 256 B; SRAM Memory: 512 B; Timer 8 bits: 2; Timer 16 bits: 1; PWM Channel: 6; ADC Channel: 8; I/O Pins: 23; Supply Voltage (Vdd): 1.8 - 5.5 V; Clock Frequency: 0 - 20 MHz; Debug: debugWire; Serial USART: 1; Serial SPI: 1; Serial I2C: 1; Analog Comparator: 1
footprint TQFP32-7.0mm(0.8mm) (Thin Quad Flat Pack 32 pin; 3D André L'Hérault)
pins: 1 OC2B/INT1/PCINT19/PD3, 2 XCK/T0/PCINT20/PD4, 3 GND, 4 Vcc, 5 GND, 6 Vcc, 7 PB6/PCINT6/TOSC1/XTAL1, 8 PB7/PCINT7/TOSC2/XTAL2, 9 OC0B/T1/PCINT21/PD5, 10 OC0A/AIN0/PCINT22/PD6, 11 AIN1/PCINT23/PD7, 12 PB0/PCINT0/CLKO/ICP1, 13 PB1/PCINT1/OC1A, 14 PB2/PCINT2/OC1B/~{SS}, 15 PB3/PCINT3/OC2A/MOSI, 16 PB4/PCINT4/MISO, 17 PB5/PCINT5/SCK, 18 AVcc, 19 ADC6, 20 AREF, 21 GND, 22 ADC7, 23 PC0/PCINT8/ADC0, 24 PC1/PCINT9/ADC1, 25 PC2/PCINT10/ADC2, 26 PC3/PCINT11/ADC3, 27 PC4/PCINT12/ADC4/SDA, 28 PC5/PCINT13/ADC5/SCL, 29 PC6/PCINT14/~{RESET}, 30 RXD/PCINT16/PD0, 31 TXD/PCINT17/PD1, 32 INT0/PCINT18/PD2

## ATmega48PA-PU
designator U?
8-bit AVR Microcontroller with 4 KB In-System Programmable Flash; Flash Memory: 4 KB; EEPROM Memory: 256 B; SRAM Memory: 512 B; Timer 8 bits: 2; Timer 16 bits: 1; PWM Channel: 6; I/O Pins: 23; Supply Voltage (Vdd): 1.8 - 5.5 V; Clock Frequency: 0 - 20 MHz; Debug: debugWire; ADC Channel: 6; Serial USART: 1; Serial SPI: 1; Serial I2C: 1; Analog Comparator: 1
footprint DIP28-300(100) (DIP, 28-Leads, Row Spacing 7.62mm, Pitch 2.54mm, Body 34.67x7.3mm)
pins: 1 PC6/PCINT14/~{RESET} (io), 2 RXD/PCINT16/PD0 (io), 3 TXD/PCINT17/PD1 (io), 4 INT0/PCINT18/PD2 (io), 5 OC2B/INT1/PCINT19/PD3 (io), 6 XCK/T0/PCINT20/PD4 (io), 7 Vcc, 8 GND, 9 PB6/PCINT6/TOSC1/XTAL1 (io), 10 PB7/PCINT7/TOSC2/XTAL2 (io), 11 OC0B/T1/PCINT21/PD5 (io), 12 OC0A/AIN0/PCINT22/PD6 (io), 13 AIN1/PCINT23/PD7 (io), 14 PB0/PCINT0/CLKO/ICP1 (io), 15 PB1/PCINT1/OC1A (io), 16 PB2/PCINT2/OC1B/~{SS} (io), 17 PB3/PCINT3/OC2A/MOSI (io), 18 PB4/PCINT4/MISO (io), 19 PB5/PCINT5/SCK (io), 20 AVcc, 21 AREF, 22 GND, 23 PC0/PCINT8/ADC0 (io), 24 PC1/PCINT9/ADC1 (io), 25 PC2/PCINT10/ADC2 (io), 26 PC3/PCINT11/ADC3 (io), 27 PC4/PCINT12/ADC4/SDA (io), 28 PC5/PCINT13/ADC5/SCL (io)

## ATmega88A-AU
designator U?
8-bit AVR Microcontroller with 8 KB In-System Programmable Flash; Flash Memory: 8 KB; EEPROM Memory: 512 B; SRAM Memory: 1 KB; Timer 8 bits: 2; Timer 16 bits: 1; PWM Channel: 6; ADC Channel: 8; I/O Pins: 23; Supply Voltage (Vdd): 1.8 - 5.5 V; Clock Frequency: 0 - 20 MHz; Debug: debugWire; Serial USART: 1; Serial SPI: 1; Serial I2C: 1; Analog Comparator: 1
footprint TQFP32-7.0mm(0.8mm) (Thin Quad Flat Pack 32 pin; 3D André L'Hérault)
pins: 1 OC2B/INT1/PCINT19/PD3, 2 XCK/T0/PCINT20/PD4, 3 GND, 4 Vcc, 5 GND, 6 Vcc, 7 PB6/PCINT6/TOSC1/XTAL1, 8 PB7/PCINT7/TOSC2/XTAL2, 9 OC0B/T1/PCINT21/PD5, 10 OC0A/AIN0/PCINT22/PD6, 11 AIN1/PCINT23/PD7, 12 PB0/PCINT0/CLKO/ICP1, 13 PB1/PCINT1/OC1A, 14 PB2/PCINT2/OC1B/~{SS}, 15 PB3/PCINT3/OC2A/MOSI, 16 PB4/PCINT4/MISO, 17 PB5/PCINT5/SCK, 18 AVcc, 19 ADC6, 20 AREF, 21 GND, 22 ADC7, 23 PC0/PCINT8/ADC0, 24 PC1/PCINT9/ADC1, 25 PC2/PCINT10/ADC2, 26 PC3/PCINT11/ADC3, 27 PC4/PCINT12/ADC4/SDA, 28 PC5/PCINT13/ADC5/SCL, 29 PC6/PCINT14/~{RESET}, 30 RXD/PCINT16/PD0, 31 TXD/PCINT17/PD1, 32 INT0/PCINT18/PD2

## ATmega88A-PN
designator U?
8-bit AVR Microcontroller with 8 KB In-System Programmable Flash; Flash Memory: 8 KB; EEPROM Memory: 512 B; SRAM Memory: 1 KB; Timer 8 bits: 2; Timer 16 bits: 1; PWM Channel: 6; I/O Pins: 23; Supply Voltage (Vdd): 1.8 - 5.5 V; Clock Frequency: 0 - 20 MHz; Debug: debugWire; ADC Channel: 6; Serial USART: 1; Serial SPI: 1; Serial I2C: 1; Analog Comparator: 1
footprint DIP28-300(100) (DIP, 28-Leads, Row Spacing 7.62mm, Pitch 2.54mm, Body 34.67x7.3mm)
pins: 1 PC6/PCINT14/~{RESET} (io), 2 RXD/PCINT16/PD0 (io), 3 TXD/PCINT17/PD1 (io), 4 INT0/PCINT18/PD2 (io), 5 OC2B/INT1/PCINT19/PD3 (io), 6 XCK/T0/PCINT20/PD4 (io), 7 Vcc, 8 GND, 9 PB6/PCINT6/TOSC1/XTAL1 (io), 10 PB7/PCINT7/TOSC2/XTAL2 (io), 11 OC0B/T1/PCINT21/PD5 (io), 12 OC0A/AIN0/PCINT22/PD6 (io), 13 AIN1/PCINT23/PD7 (io), 14 PB0/PCINT0/CLKO/ICP1 (io), 15 PB1/PCINT1/OC1A (io), 16 PB2/PCINT2/OC1B/~{SS} (io), 17 PB3/PCINT3/OC2A/MOSI (io), 18 PB4/PCINT4/MISO (io), 19 PB5/PCINT5/SCK (io), 20 AVcc, 21 AREF, 22 GND, 23 PC0/PCINT8/ADC0 (io), 24 PC1/PCINT9/ADC1 (io), 25 PC2/PCINT10/ADC2 (io), 26 PC3/PCINT11/ADC3 (io), 27 PC4/PCINT12/ADC4/SDA (io), 28 PC5/PCINT13/ADC5/SCL (io)

## ATmega88A-PU
designator U?
8-bit AVR Microcontroller with 8 KB In-System Programmable Flash; Flash Memory: 8 KB; EEPROM Memory: 512 B; SRAM Memory: 1 KB; Timer 8 bits: 2; Timer 16 bits: 1; PWM Channel: 6; I/O Pins: 23; Supply Voltage (Vdd): 1.8 - 5.5 V; Clock Frequency: 0 - 20 MHz; Debug: debugWire; ADC Channel: 6; Serial USART: 1; Serial SPI: 1; Serial I2C: 1; Analog Comparator: 1
footprint DIP28-300(100) (DIP, 28-Leads, Row Spacing 7.62mm, Pitch 2.54mm, Body 34.67x7.3mm)
pins: 1 PC6/PCINT14/~{RESET} (io), 2 RXD/PCINT16/PD0 (io), 3 TXD/PCINT17/PD1 (io), 4 INT0/PCINT18/PD2 (io), 5 OC2B/INT1/PCINT19/PD3 (io), 6 XCK/T0/PCINT20/PD4 (io), 7 Vcc, 8 GND, 9 PB6/PCINT6/TOSC1/XTAL1 (io), 10 PB7/PCINT7/TOSC2/XTAL2 (io), 11 OC0B/T1/PCINT21/PD5 (io), 12 OC0A/AIN0/PCINT22/PD6 (io), 13 AIN1/PCINT23/PD7 (io), 14 PB0/PCINT0/CLKO/ICP1 (io), 15 PB1/PCINT1/OC1A (io), 16 PB2/PCINT2/OC1B/~{SS} (io), 17 PB3/PCINT3/OC2A/MOSI (io), 18 PB4/PCINT4/MISO (io), 19 PB5/PCINT5/SCK (io), 20 AVcc, 21 AREF, 22 GND, 23 PC0/PCINT8/ADC0 (io), 24 PC1/PCINT9/ADC1 (io), 25 PC2/PCINT10/ADC2 (io), 26 PC3/PCINT11/ADC3 (io), 27 PC4/PCINT12/ADC4/SDA (io), 28 PC5/PCINT13/ADC5/SCL (io)

## ATmega88PA-AN
designator U?
8-bit AVR Microcontroller with 8 KB In-System Programmable Flash; Flash Memory: 8 KB; EEPROM Memory: 512 B; SRAM Memory: 1 KB; Timer 8 bits: 2; Timer 16 bits: 1; PWM Channel: 6; ADC Channel: 8; I/O Pins: 23; Supply Voltage (Vdd): 1.8 - 5.5 V; Clock Frequency: 0 - 20 MHz; Debug: debugWire; Serial USART: 1; Serial SPI: 1; Serial I2C: 1; Analog Comparator: 1
footprint TQFP32-7.0mm(0.8mm) (Thin Quad Flat Pack 32 pin; 3D André L'Hérault)
pins: 1 OC2B/INT1/PCINT19/PD3, 2 XCK/T0/PCINT20/PD4, 3 GND, 4 Vcc, 5 GND, 6 Vcc, 7 PB6/PCINT6/TOSC1/XTAL1, 8 PB7/PCINT7/TOSC2/XTAL2, 9 OC0B/T1/PCINT21/PD5, 10 OC0A/AIN0/PCINT22/PD6, 11 AIN1/PCINT23/PD7, 12 PB0/PCINT0/CLKO/ICP1, 13 PB1/PCINT1/OC1A, 14 PB2/PCINT2/OC1B/~{SS}, 15 PB3/PCINT3/OC2A/MOSI, 16 PB4/PCINT4/MISO, 17 PB5/PCINT5/SCK, 18 AVcc, 19 ADC6, 20 AREF, 21 GND, 22 ADC7, 23 PC0/PCINT8/ADC0, 24 PC1/PCINT9/ADC1, 25 PC2/PCINT10/ADC2, 26 PC3/PCINT11/ADC3, 27 PC4/PCINT12/ADC4/SDA, 28 PC5/PCINT13/ADC5/SCL, 29 PC6/PCINT14/~{RESET}, 30 RXD/PCINT16/PD0, 31 TXD/PCINT17/PD1, 32 INT0/PCINT18/PD2

## ATmega88PA-AU
designator U?
8-bit AVR Microcontroller with 8 KB In-System Programmable Flash; Flash Memory: 8 KB; EEPROM Memory: 512 B; SRAM Memory: 1 KB; Timer 8 bits: 2; Timer 16 bits: 1; PWM Channel: 6; ADC Channel: 8; I/O Pins: 23; Supply Voltage (Vdd): 1.8 - 5.5 V; Clock Frequency: 0 - 20 MHz; Debug: debugWire; Serial USART: 1; Serial SPI: 1; Serial I2C: 1; Analog Comparator: 1
footprint TQFP32-7.0mm(0.8mm) (Thin Quad Flat Pack 32 pin; 3D André L'Hérault)
pins: 1 OC2B/INT1/PCINT19/PD3, 2 XCK/T0/PCINT20/PD4, 3 GND, 4 Vcc, 5 GND, 6 Vcc, 7 PB6/PCINT6/TOSC1/XTAL1, 8 PB7/PCINT7/TOSC2/XTAL2, 9 OC0B/T1/PCINT21/PD5, 10 OC0A/AIN0/PCINT22/PD6, 11 AIN1/PCINT23/PD7, 12 PB0/PCINT0/CLKO/ICP1, 13 PB1/PCINT1/OC1A, 14 PB2/PCINT2/OC1B/~{SS}, 15 PB3/PCINT3/OC2A/MOSI, 16 PB4/PCINT4/MISO, 17 PB5/PCINT5/SCK, 18 AVcc, 19 ADC6, 20 AREF, 21 GND, 22 ADC7, 23 PC0/PCINT8/ADC0, 24 PC1/PCINT9/ADC1, 25 PC2/PCINT10/ADC2, 26 PC3/PCINT11/ADC3, 27 PC4/PCINT12/ADC4/SDA, 28 PC5/PCINT13/ADC5/SCL, 29 PC6/PCINT14/~{RESET}, 30 RXD/PCINT16/PD0, 31 TXD/PCINT17/PD1, 32 INT0/PCINT18/PD2

## ATmega88PA-PU
designator U?
8-bit AVR Microcontroller with 8 KB In-System Programmable Flash; Flash Memory: 8 KB; EEPROM Memory: 512 B; SRAM Memory: 1 KB; Timer 8 bits: 2; Timer 16 bits: 1; PWM Channel: 6; I/O Pins: 23; Supply Voltage (Vdd): 1.8 - 5.5 V; Clock Frequency: 0 - 20 MHz; Debug: debugWire; ADC Channel: 6; Serial USART: 1; Serial SPI: 1; Serial I2C: 1; Analog Comparator: 1
footprint DIP28-300(100) (DIP, 28-Leads, Row Spacing 7.62mm, Pitch 2.54mm, Body 34.67x7.3mm)
pins: 1 PC6/PCINT14/~{RESET} (io), 2 RXD/PCINT16/PD0 (io), 3 TXD/PCINT17/PD1 (io), 4 INT0/PCINT18/PD2 (io), 5 OC2B/INT1/PCINT19/PD3 (io), 6 XCK/T0/PCINT20/PD4 (io), 7 Vcc, 8 GND, 9 PB6/PCINT6/TOSC1/XTAL1 (io), 10 PB7/PCINT7/TOSC2/XTAL2 (io), 11 OC0B/T1/PCINT21/PD5 (io), 12 OC0A/AIN0/PCINT22/PD6 (io), 13 AIN1/PCINT23/PD7 (io), 14 PB0/PCINT0/CLKO/ICP1 (io), 15 PB1/PCINT1/OC1A (io), 16 PB2/PCINT2/OC1B/~{SS} (io), 17 PB3/PCINT3/OC2A/MOSI (io), 18 PB4/PCINT4/MISO (io), 19 PB5/PCINT5/SCK (io), 20 AVcc, 21 AREF, 22 GND, 23 PC0/PCINT8/ADC0 (io), 24 PC1/PCINT9/ADC1 (io), 25 PC2/PCINT10/ADC2 (io), 26 PC3/PCINT11/ADC3 (io), 27 PC4/PCINT12/ADC4/SDA (io), 28 PC5/PCINT13/ADC5/SCL (io)

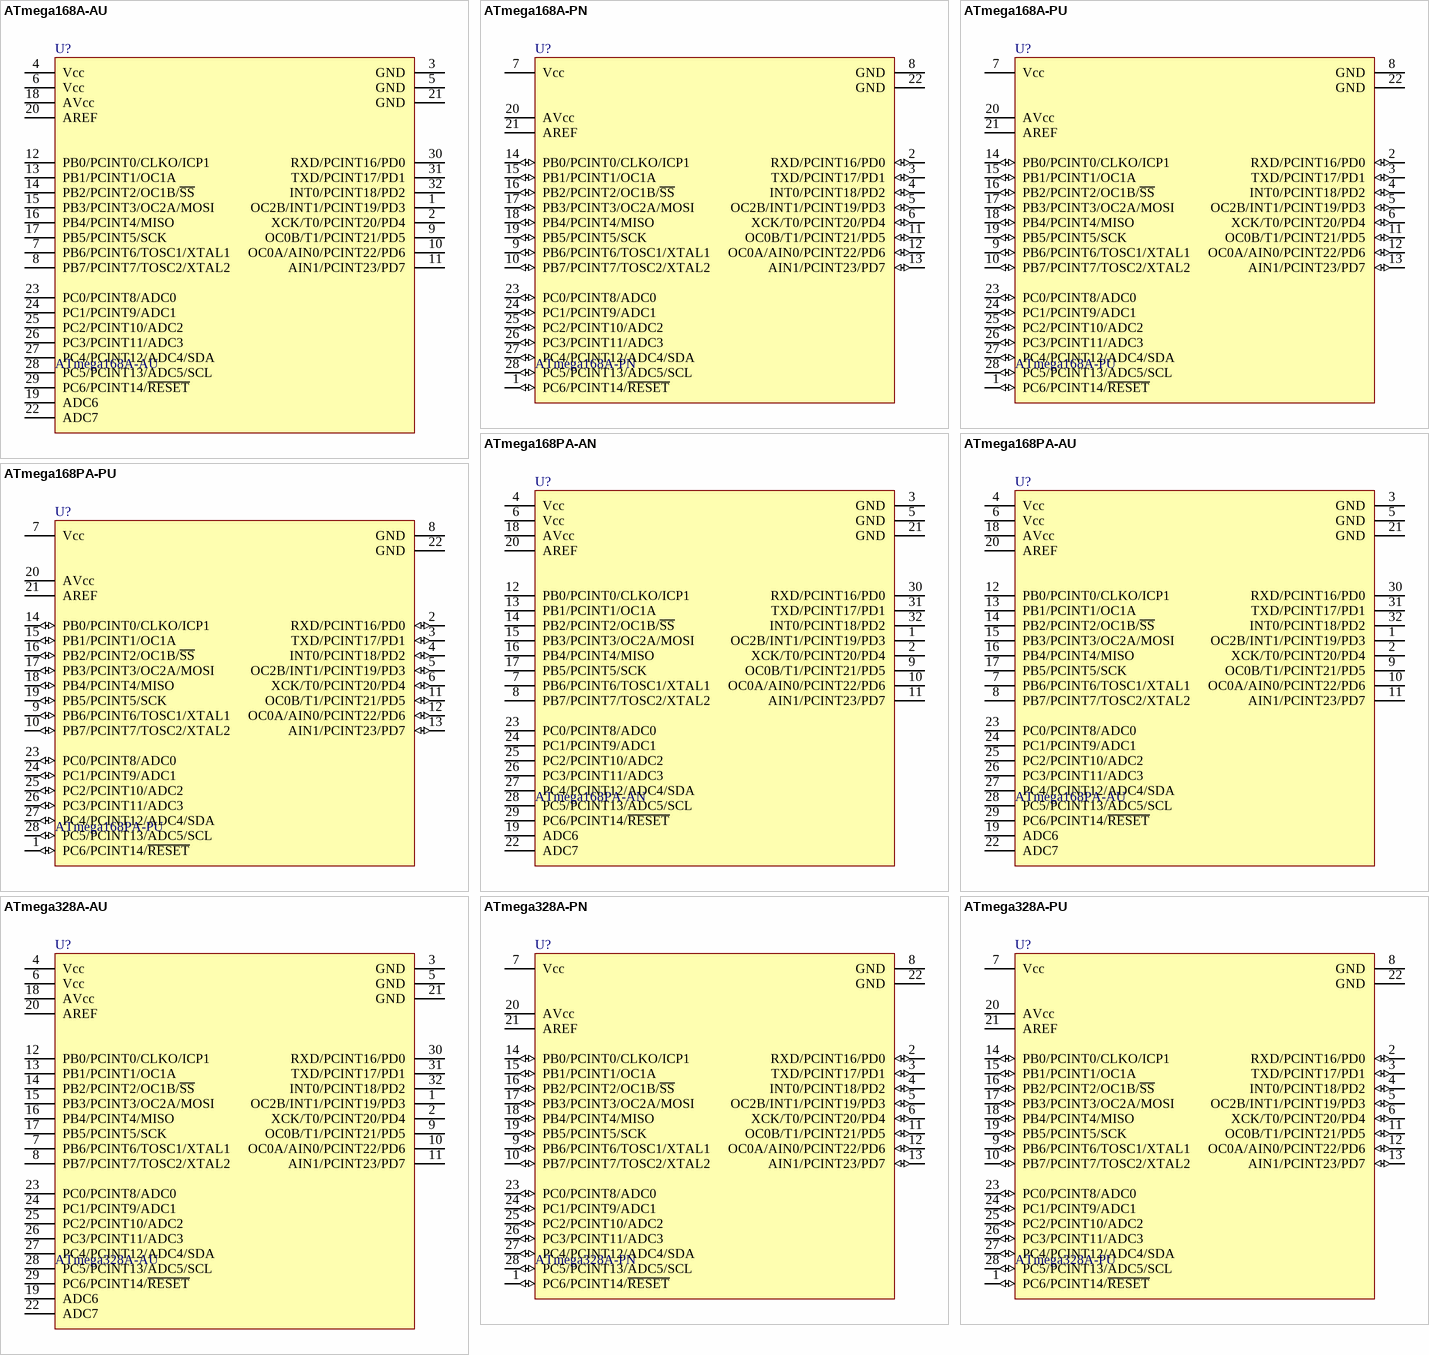
[diagram p9: symbols ATmega168A-AU to ATmega328A-PU]

## ATmega168A-AU
designator U?
8-bit AVR Microcontroller with 16 KB In-System Programmable Flash; Flash Memory: 16 KB; EEPROM Memory: 512 B; SRAM Memory: 1 KB; Timer 8 bits: 2; Timer 16 bits: 1; PWM Channel: 6; ADC Channel: 8; I/O Pins: 23; Supply Voltage (Vdd): 1.8 - 5.5 V; Clock Frequency: 0 - 20 MHz; Debug: debugWire; Serial USART: 1; Serial SPI: 1; Serial I2C: 1; Analog Comparator: 1
footprint TQFP32-7.0mm(0.8mm) (Thin Quad Flat Pack 32 pin; 3D André L'Hérault)
pins: 1 OC2B/INT1/PCINT19/PD3, 2 XCK/T0/PCINT20/PD4, 3 GND, 4 Vcc, 5 GND, 6 Vcc, 7 PB6/PCINT6/TOSC1/XTAL1, 8 PB7/PCINT7/TOSC2/XTAL2, 9 OC0B/T1/PCINT21/PD5, 10 OC0A/AIN0/PCINT22/PD6, 11 AIN1/PCINT23/PD7, 12 PB0/PCINT0/CLKO/ICP1, 13 PB1/PCINT1/OC1A, 14 PB2/PCINT2/OC1B/~{SS}, 15 PB3/PCINT3/OC2A/MOSI, 16 PB4/PCINT4/MISO, 17 PB5/PCINT5/SCK, 18 AVcc, 19 ADC6, 20 AREF, 21 GND, 22 ADC7, 23 PC0/PCINT8/ADC0, 24 PC1/PCINT9/ADC1, 25 PC2/PCINT10/ADC2, 26 PC3/PCINT11/ADC3, 27 PC4/PCINT12/ADC4/SDA, 28 PC5/PCINT13/ADC5/SCL, 29 PC6/PCINT14/~{RESET}, 30 RXD/PCINT16/PD0, 31 TXD/PCINT17/PD1, 32 INT0/PCINT18/PD2

## ATmega168A-PN
designator U?
8-bit AVR Microcontroller with 16 KB In-System Programmable Flash; Flash Memory: 16 KB; EEPROM Memory: 512 B; SRAM Memory: 1 KB; Timer 8 bits: 2; Timer 16 bits: 1; PWM Channel: 6; I/O Pins: 23; Supply Voltage (Vdd): 1.8 - 5.5 V; Clock Frequency: 0 - 20 MHz; Debug: debugWire; ADC Channel: 6; Serial USART: 1; Serial SPI: 1; Serial I2C: 1; Analog Comparator: 1
footprint DIP28-300(100) (DIP, 28-Leads, Row Spacing 7.62mm, Pitch 2.54mm, Body 34.67x7.3mm)
pins: 1 PC6/PCINT14/~{RESET} (io), 2 RXD/PCINT16/PD0 (io), 3 TXD/PCINT17/PD1 (io), 4 INT0/PCINT18/PD2 (io), 5 OC2B/INT1/PCINT19/PD3 (io), 6 XCK/T0/PCINT20/PD4 (io), 7 Vcc, 8 GND, 9 PB6/PCINT6/TOSC1/XTAL1 (io), 10 PB7/PCINT7/TOSC2/XTAL2 (io), 11 OC0B/T1/PCINT21/PD5 (io), 12 OC0A/AIN0/PCINT22/PD6 (io), 13 AIN1/PCINT23/PD7 (io), 14 PB0/PCINT0/CLKO/ICP1 (io), 15 PB1/PCINT1/OC1A (io), 16 PB2/PCINT2/OC1B/~{SS} (io), 17 PB3/PCINT3/OC2A/MOSI (io), 18 PB4/PCINT4/MISO (io), 19 PB5/PCINT5/SCK (io), 20 AVcc, 21 AREF, 22 GND, 23 PC0/PCINT8/ADC0 (io), 24 PC1/PCINT9/ADC1 (io), 25 PC2/PCINT10/ADC2 (io), 26 PC3/PCINT11/ADC3 (io), 27 PC4/PCINT12/ADC4/SDA (io), 28 PC5/PCINT13/ADC5/SCL (io)

## ATmega168A-PU
designator U?
8-bit AVR Microcontroller with 16 KB In-System Programmable Flash; Flash Memory: 16 KB; EEPROM Memory: 512 B; SRAM Memory: 1 KB; Timer 8 bits: 2; Timer 16 bits: 1; PWM Channel: 6; I/O Pins: 23; Supply Voltage (Vdd): 1.8 - 5.5 V; Clock Frequency: 0 - 20 MHz; Debug: debugWire; ADC Channel: 6; Serial USART: 1; Serial SPI: 1; Serial I2C: 1; Analog Comparator: 1
footprint DIP28-300(100) (DIP, 28-Leads, Row Spacing 7.62mm, Pitch 2.54mm, Body 34.67x7.3mm)
pins: 1 PC6/PCINT14/~{RESET} (io), 2 RXD/PCINT16/PD0 (io), 3 TXD/PCINT17/PD1 (io), 4 INT0/PCINT18/PD2 (io), 5 OC2B/INT1/PCINT19/PD3 (io), 6 XCK/T0/PCINT20/PD4 (io), 7 Vcc, 8 GND, 9 PB6/PCINT6/TOSC1/XTAL1 (io), 10 PB7/PCINT7/TOSC2/XTAL2 (io), 11 OC0B/T1/PCINT21/PD5 (io), 12 OC0A/AIN0/PCINT22/PD6 (io), 13 AIN1/PCINT23/PD7 (io), 14 PB0/PCINT0/CLKO/ICP1 (io), 15 PB1/PCINT1/OC1A (io), 16 PB2/PCINT2/OC1B/~{SS} (io), 17 PB3/PCINT3/OC2A/MOSI (io), 18 PB4/PCINT4/MISO (io), 19 PB5/PCINT5/SCK (io), 20 AVcc, 21 AREF, 22 GND, 23 PC0/PCINT8/ADC0 (io), 24 PC1/PCINT9/ADC1 (io), 25 PC2/PCINT10/ADC2 (io), 26 PC3/PCINT11/ADC3 (io), 27 PC4/PCINT12/ADC4/SDA (io), 28 PC5/PCINT13/ADC5/SCL (io)

## ATmega168PA-AN
designator U?
8-bit AVR Microcontroller with 16 KB In-System Programmable Flash; Flash Memory: 16 KB; EEPROM Memory: 512 B; SRAM Memory: 1 KB; Timer 8 bits: 2; Timer 16 bits: 1; PWM Channel: 6; ADC Channel: 8; I/O Pins: 23; Supply Voltage (Vdd): 1.8 - 5.5 V; Clock Frequency: 0 - 20 MHz; Debug: debugWire; Serial USART: 1; Serial SPI: 1; Serial I2C: 1; Analog Comparator: 1
footprint TQFP32-7.0mm(0.8mm) (Thin Quad Flat Pack 32 pin; 3D André L'Hérault)
pins: 1 OC2B/INT1/PCINT19/PD3, 2 XCK/T0/PCINT20/PD4, 3 GND, 4 Vcc, 5 GND, 6 Vcc, 7 PB6/PCINT6/TOSC1/XTAL1, 8 PB7/PCINT7/TOSC2/XTAL2, 9 OC0B/T1/PCINT21/PD5, 10 OC0A/AIN0/PCINT22/PD6, 11 AIN1/PCINT23/PD7, 12 PB0/PCINT0/CLKO/ICP1, 13 PB1/PCINT1/OC1A, 14 PB2/PCINT2/OC1B/~{SS}, 15 PB3/PCINT3/OC2A/MOSI, 16 PB4/PCINT4/MISO, 17 PB5/PCINT5/SCK, 18 AVcc, 19 ADC6, 20 AREF, 21 GND, 22 ADC7, 23 PC0/PCINT8/ADC0, 24 PC1/PCINT9/ADC1, 25 PC2/PCINT10/ADC2, 26 PC3/PCINT11/ADC3, 27 PC4/PCINT12/ADC4/SDA, 28 PC5/PCINT13/ADC5/SCL, 29 PC6/PCINT14/~{RESET}, 30 RXD/PCINT16/PD0, 31 TXD/PCINT17/PD1, 32 INT0/PCINT18/PD2

## ATmega168PA-AU
designator U?
8-bit AVR Microcontroller with 16 KB In-System Programmable Flash; Flash Memory: 16 KB; EEPROM Memory: 512 B; SRAM Memory: 1 KB; Timer 8 bits: 2; Timer 16 bits: 1; PWM Channel: 6; ADC Channel: 8; I/O Pins: 23; Supply Voltage (Vdd): 1.8 - 5.5 V; Clock Frequency: 0 - 20 MHz; Debug: debugWire; Serial USART: 1; Serial SPI: 1; Serial I2C: 1; Analog Comparator: 1
footprint TQFP32-7.0mm(0.8mm) (Thin Quad Flat Pack 32 pin; 3D André L'Hérault)
pins: 1 OC2B/INT1/PCINT19/PD3, 2 XCK/T0/PCINT20/PD4, 3 GND, 4 Vcc, 5 GND, 6 Vcc, 7 PB6/PCINT6/TOSC1/XTAL1, 8 PB7/PCINT7/TOSC2/XTAL2, 9 OC0B/T1/PCINT21/PD5, 10 OC0A/AIN0/PCINT22/PD6, 11 AIN1/PCINT23/PD7, 12 PB0/PCINT0/CLKO/ICP1, 13 PB1/PCINT1/OC1A, 14 PB2/PCINT2/OC1B/~{SS}, 15 PB3/PCINT3/OC2A/MOSI, 16 PB4/PCINT4/MISO, 17 PB5/PCINT5/SCK, 18 AVcc, 19 ADC6, 20 AREF, 21 GND, 22 ADC7, 23 PC0/PCINT8/ADC0, 24 PC1/PCINT9/ADC1, 25 PC2/PCINT10/ADC2, 26 PC3/PCINT11/ADC3, 27 PC4/PCINT12/ADC4/SDA, 28 PC5/PCINT13/ADC5/SCL, 29 PC6/PCINT14/~{RESET}, 30 RXD/PCINT16/PD0, 31 TXD/PCINT17/PD1, 32 INT0/PCINT18/PD2

## ATmega168PA-PU
designator U?
8-bit AVR Microcontroller with 16 KB In-System Programmable Flash; Flash Memory: 16 KB; EEPROM Memory: 512 B; SRAM Memory: 1 KB; Timer 8 bits: 2; Timer 16 bits: 1; PWM Channel: 6; I/O Pins: 23; Supply Voltage (Vdd): 1.8 - 5.5 V; Clock Frequency: 0 - 20 MHz; Debug: debugWire; ADC Channel: 6; Serial USART: 1; Serial SPI: 1; Serial I2C: 1; Analog Comparator: 1
footprint DIP28-300(100) (DIP, 28-Leads, Row Spacing 7.62mm, Pitch 2.54mm, Body 34.67x7.3mm)
pins: 1 PC6/PCINT14/~{RESET} (io), 2 RXD/PCINT16/PD0 (io), 3 TXD/PCINT17/PD1 (io), 4 INT0/PCINT18/PD2 (io), 5 OC2B/INT1/PCINT19/PD3 (io), 6 XCK/T0/PCINT20/PD4 (io), 7 Vcc, 8 GND, 9 PB6/PCINT6/TOSC1/XTAL1 (io), 10 PB7/PCINT7/TOSC2/XTAL2 (io), 11 OC0B/T1/PCINT21/PD5 (io), 12 OC0A/AIN0/PCINT22/PD6 (io), 13 AIN1/PCINT23/PD7 (io), 14 PB0/PCINT0/CLKO/ICP1 (io), 15 PB1/PCINT1/OC1A (io), 16 PB2/PCINT2/OC1B/~{SS} (io), 17 PB3/PCINT3/OC2A/MOSI (io), 18 PB4/PCINT4/MISO (io), 19 PB5/PCINT5/SCK (io), 20 AVcc, 21 AREF, 22 GND, 23 PC0/PCINT8/ADC0 (io), 24 PC1/PCINT9/ADC1 (io), 25 PC2/PCINT10/ADC2 (io), 26 PC3/PCINT11/ADC3 (io), 27 PC4/PCINT12/ADC4/SDA (io), 28 PC5/PCINT13/ADC5/SCL (io)

## ATmega328A-AU
designator U?
8-bit AVR Microcontroller with 32 KB In-System Programmable Flash; Flash Memory: 32 KB; EEPROM Memory: 1 KB; SRAM Memory: 2 KB; Timer 8 bits: 2; Timer 16 bits: 1; PWM Channel: 6; ADC Channel: 8; I/O Pins: 23; Supply Voltage (Vdd): 1.8 - 5.5 V; Clock Frequency: 0 - 20 MHz; Debug: debugWire; Serial USART: 1; Serial SPI: 1; Serial I2C: 1; Analog Comparator: 1
footprint TQFP32-7.0mm(0.8mm) (Thin Quad Flat Pack 32 pin; 3D André L'Hérault)
pins: 1 OC2B/INT1/PCINT19/PD3, 2 XCK/T0/PCINT20/PD4, 3 GND, 4 Vcc, 5 GND, 6 Vcc, 7 PB6/PCINT6/TOSC1/XTAL1, 8 PB7/PCINT7/TOSC2/XTAL2, 9 OC0B/T1/PCINT21/PD5, 10 OC0A/AIN0/PCINT22/PD6, 11 AIN1/PCINT23/PD7, 12 PB0/PCINT0/CLKO/ICP1, 13 PB1/PCINT1/OC1A, 14 PB2/PCINT2/OC1B/~{SS}, 15 PB3/PCINT3/OC2A/MOSI, 16 PB4/PCINT4/MISO, 17 PB5/PCINT5/SCK, 18 AVcc, 19 ADC6, 20 AREF, 21 GND, 22 ADC7, 23 PC0/PCINT8/ADC0, 24 PC1/PCINT9/ADC1, 25 PC2/PCINT10/ADC2, 26 PC3/PCINT11/ADC3, 27 PC4/PCINT12/ADC4/SDA, 28 PC5/PCINT13/ADC5/SCL, 29 PC6/PCINT14/~{RESET}, 30 RXD/PCINT16/PD0, 31 TXD/PCINT17/PD1, 32 INT0/PCINT18/PD2

## ATmega328A-PN
designator U?
8-bit AVR Microcontroller with 32 KB In-System Programmable Flash; Flash Memory: 32 KB; EEPROM Memory: 1 KB; SRAM Memory: 2 KB; Timer 8 bits: 2; Timer 16 bits: 1; PWM Channel: 6; I/O Pins: 23; Supply Voltage (Vdd): 1.8 - 5.5 V; Clock Frequency: 0 - 20 MHz; Debug: debugWire; ADC Channel: 6; Serial USART: 1; Serial SPI: 1; Serial I2C: 1; Analog Comparator: 1
footprint DIP28-300(100) (DIP, 28-Leads, Row Spacing 7.62mm, Pitch 2.54mm, Body 34.67x7.3mm)
pins: 1 PC6/PCINT14/~{RESET} (io), 2 RXD/PCINT16/PD0 (io), 3 TXD/PCINT17/PD1 (io), 4 INT0/PCINT18/PD2 (io), 5 OC2B/INT1/PCINT19/PD3 (io), 6 XCK/T0/PCINT20/PD4 (io), 7 Vcc, 8 GND, 9 PB6/PCINT6/TOSC1/XTAL1 (io), 10 PB7/PCINT7/TOSC2/XTAL2 (io), 11 OC0B/T1/PCINT21/PD5 (io), 12 OC0A/AIN0/PCINT22/PD6 (io), 13 AIN1/PCINT23/PD7 (io), 14 PB0/PCINT0/CLKO/ICP1 (io), 15 PB1/PCINT1/OC1A (io), 16 PB2/PCINT2/OC1B/~{SS} (io), 17 PB3/PCINT3/OC2A/MOSI (io), 18 PB4/PCINT4/MISO (io), 19 PB5/PCINT5/SCK (io), 20 AVcc, 21 AREF, 22 GND, 23 PC0/PCINT8/ADC0 (io), 24 PC1/PCINT9/ADC1 (io), 25 PC2/PCINT10/ADC2 (io), 26 PC3/PCINT11/ADC3 (io), 27 PC4/PCINT12/ADC4/SDA (io), 28 PC5/PCINT13/ADC5/SCL (io)

## ATmega328A-PU
designator U?
8-bit AVR Microcontroller with 32 KB In-System Programmable Flash; Flash Memory: 32 KB; EEPROM Memory: 1 KB; SRAM Memory: 2 KB; Timer 8 bits: 2; Timer 16 bits: 1; PWM Channel: 6; I/O Pins: 23; Supply Voltage (Vdd): 1.8 - 5.5 V; Clock Frequency: 0 - 20 MHz; Debug: debugWire; ADC Channel: 6; Serial USART: 1; Serial SPI: 1; Serial I2C: 1; Analog Comparator: 1
footprint DIP28-300(100) (DIP, 28-Leads, Row Spacing 7.62mm, Pitch 2.54mm, Body 34.67x7.3mm)
pins: 1 PC6/PCINT14/~{RESET} (io), 2 RXD/PCINT16/PD0 (io), 3 TXD/PCINT17/PD1 (io), 4 INT0/PCINT18/PD2 (io), 5 OC2B/INT1/PCINT19/PD3 (io), 6 XCK/T0/PCINT20/PD4 (io), 7 Vcc, 8 GND, 9 PB6/PCINT6/TOSC1/XTAL1 (io), 10 PB7/PCINT7/TOSC2/XTAL2 (io), 11 OC0B/T1/PCINT21/PD5 (io), 12 OC0A/AIN0/PCINT22/PD6 (io), 13 AIN1/PCINT23/PD7 (io), 14 PB0/PCINT0/CLKO/ICP1 (io), 15 PB1/PCINT1/OC1A (io), 16 PB2/PCINT2/OC1B/~{SS} (io), 17 PB3/PCINT3/OC2A/MOSI (io), 18 PB4/PCINT4/MISO (io), 19 PB5/PCINT5/SCK (io), 20 AVcc, 21 AREF, 22 GND, 23 PC0/PCINT8/ADC0 (io), 24 PC1/PCINT9/ADC1 (io), 25 PC2/PCINT10/ADC2 (io), 26 PC3/PCINT11/ADC3 (io), 27 PC4/PCINT12/ADC4/SDA (io), 28 PC5/PCINT13/ADC5/SCL (io)

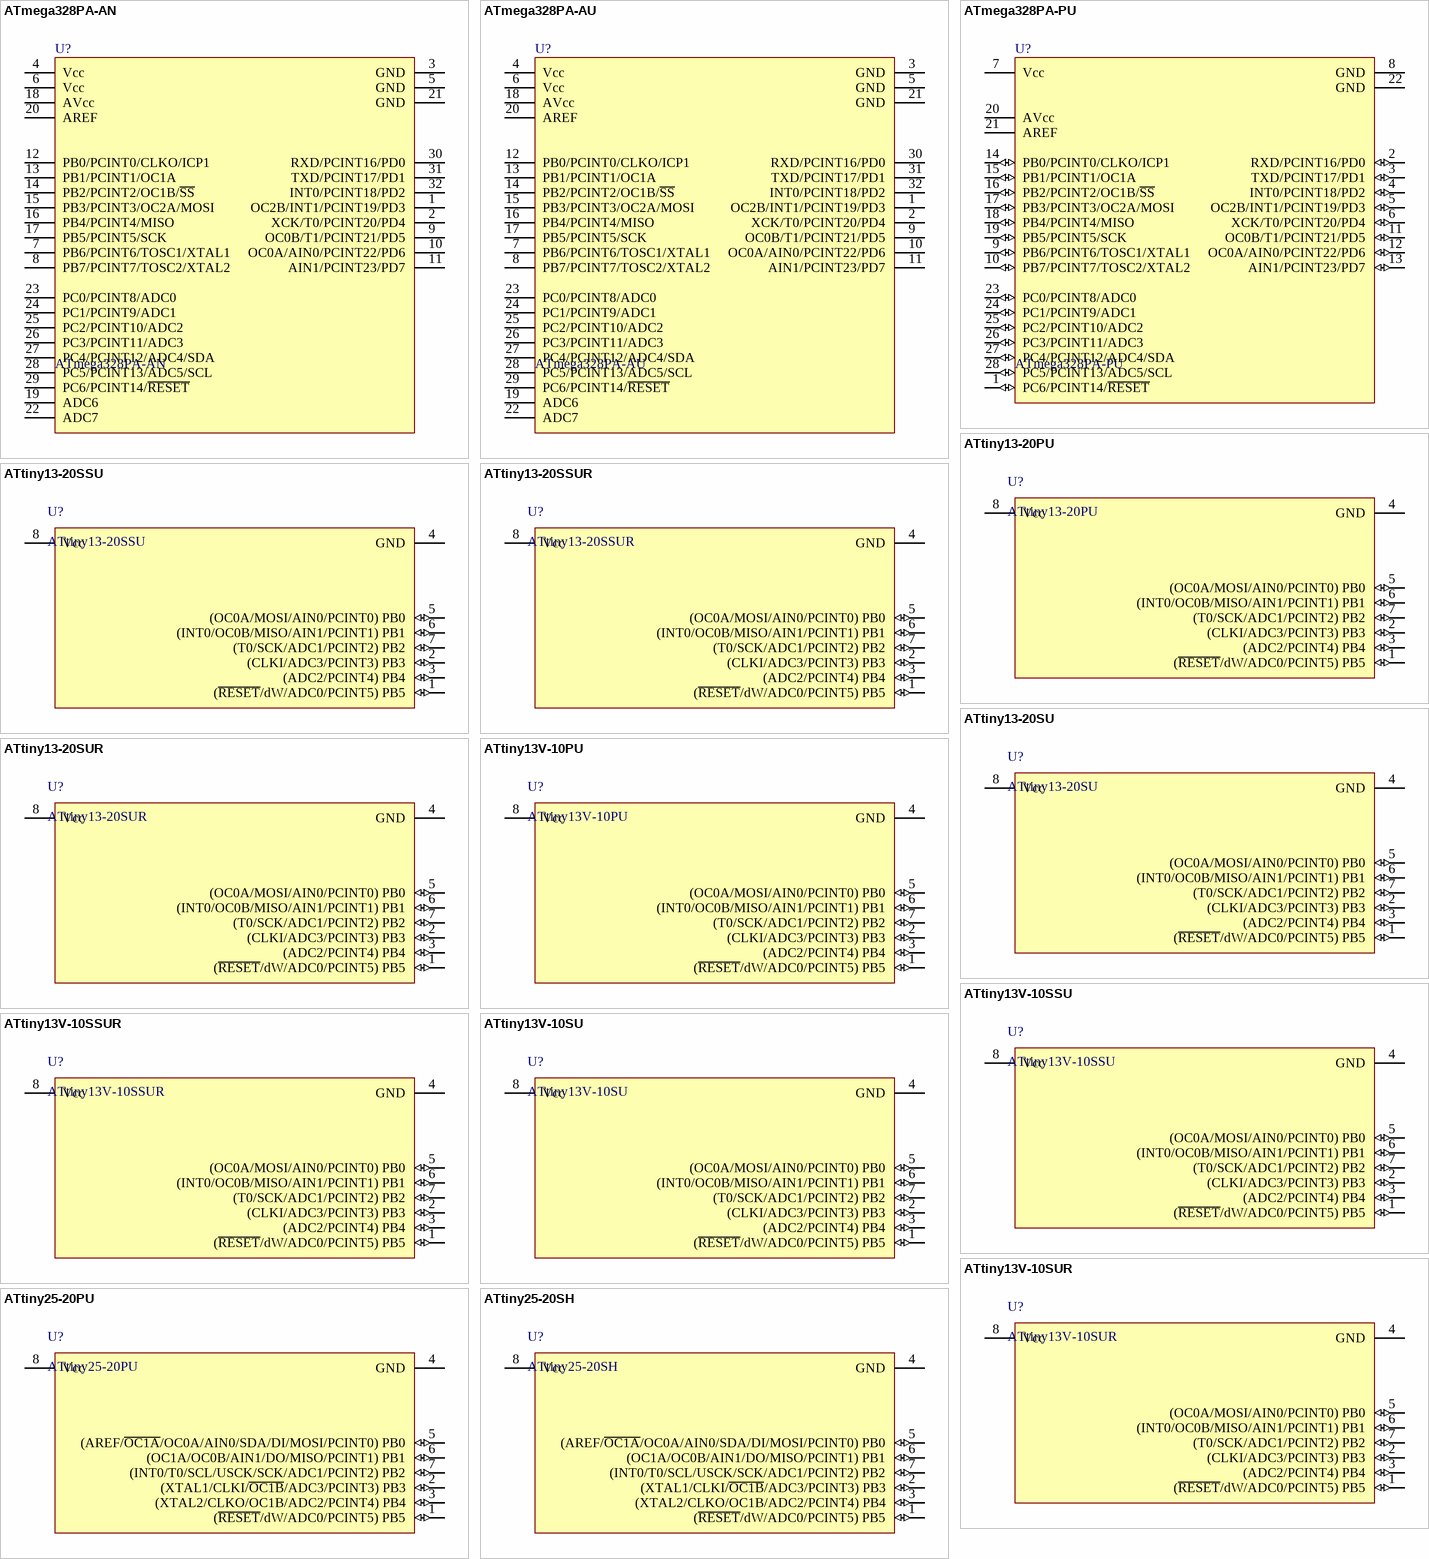
[diagram p10: symbols ATmega328PA-AN to ATtiny25-20SH]

## ATmega328PA-AN
designator U?
8-bit AVR Microcontroller with 32 KB In-System Programmable Flash; Flash Memory: 32 KB; EEPROM Memory: 1 KB; SRAM Memory: 2 KB; Timer 8 bits: 2; Timer 16 bits: 1; PWM Channel: 6; ADC Channel: 8; I/O Pins: 23; Supply Voltage (Vdd): 1.8 - 5.5 V; Clock Frequency: 0 - 20 MHz; Debug: debugWire; Serial USART: 1; Serial SPI: 1; Serial I2C: 1; Analog Comparator: 1
footprint TQFP32-7.0mm(0.8mm) (Thin Quad Flat Pack 32 pin; 3D André L'Hérault)
pins: 1 OC2B/INT1/PCINT19/PD3, 2 XCK/T0/PCINT20/PD4, 3 GND, 4 Vcc, 5 GND, 6 Vcc, 7 PB6/PCINT6/TOSC1/XTAL1, 8 PB7/PCINT7/TOSC2/XTAL2, 9 OC0B/T1/PCINT21/PD5, 10 OC0A/AIN0/PCINT22/PD6, 11 AIN1/PCINT23/PD7, 12 PB0/PCINT0/CLKO/ICP1, 13 PB1/PCINT1/OC1A, 14 PB2/PCINT2/OC1B/~{SS}, 15 PB3/PCINT3/OC2A/MOSI, 16 PB4/PCINT4/MISO, 17 PB5/PCINT5/SCK, 18 AVcc, 19 ADC6, 20 AREF, 21 GND, 22 ADC7, 23 PC0/PCINT8/ADC0, 24 PC1/PCINT9/ADC1, 25 PC2/PCINT10/ADC2, 26 PC3/PCINT11/ADC3, 27 PC4/PCINT12/ADC4/SDA, 28 PC5/PCINT13/ADC5/SCL, 29 PC6/PCINT14/~{RESET}, 30 RXD/PCINT16/PD0, 31 TXD/PCINT17/PD1, 32 INT0/PCINT18/PD2

## ATmega328PA-AU
designator U?
8-bit AVR Microcontroller with 32 KB In-System Programmable Flash; Flash Memory: 32 KB; EEPROM Memory: 1 KB; SRAM Memory: 2 KB; Timer 8 bits: 2; Timer 16 bits: 1; PWM Channel: 6; ADC Channel: 8; I/O Pins: 23; Supply Voltage (Vdd): 1.8 - 5.5 V; Clock Frequency: 0 - 20 MHz; Debug: debugWire; Serial USART: 1; Serial SPI: 1; Serial I2C: 1; Analog Comparator: 1
footprint TQFP32-7.0mm(0.8mm) (Thin Quad Flat Pack 32 pin; 3D André L'Hérault)
pins: 1 OC2B/INT1/PCINT19/PD3, 2 XCK/T0/PCINT20/PD4, 3 GND, 4 Vcc, 5 GND, 6 Vcc, 7 PB6/PCINT6/TOSC1/XTAL1, 8 PB7/PCINT7/TOSC2/XTAL2, 9 OC0B/T1/PCINT21/PD5, 10 OC0A/AIN0/PCINT22/PD6, 11 AIN1/PCINT23/PD7, 12 PB0/PCINT0/CLKO/ICP1, 13 PB1/PCINT1/OC1A, 14 PB2/PCINT2/OC1B/~{SS}, 15 PB3/PCINT3/OC2A/MOSI, 16 PB4/PCINT4/MISO, 17 PB5/PCINT5/SCK, 18 AVcc, 19 ADC6, 20 AREF, 21 GND, 22 ADC7, 23 PC0/PCINT8/ADC0, 24 PC1/PCINT9/ADC1, 25 PC2/PCINT10/ADC2, 26 PC3/PCINT11/ADC3, 27 PC4/PCINT12/ADC4/SDA, 28 PC5/PCINT13/ADC5/SCL, 29 PC6/PCINT14/~{RESET}, 30 RXD/PCINT16/PD0, 31 TXD/PCINT17/PD1, 32 INT0/PCINT18/PD2

## ATmega328PA-PU
designator U?
8-bit AVR Microcontroller with 32 KB In-System Programmable Flash; Flash Memory: 32 KB; EEPROM Memory: 1 KB; SRAM Memory: 2 KB; Timer 8 bits: 2; Timer 16 bits: 1; PWM Channel: 6; I/O Pins: 23; Supply Voltage (Vdd): 1.8 - 5.5 V; Clock Frequency: 0 - 20 MHz; Debug: debugWire; ADC Channel: 6; Serial USART: 1; Serial SPI: 1; Serial I2C: 1; Analog Comparator: 1
footprint DIP28-300(100) (DIP, 28-Leads, Row Spacing 7.62mm, Pitch 2.54mm, Body 34.67x7.3mm)
pins: 1 PC6/PCINT14/~{RESET} (io), 2 RXD/PCINT16/PD0 (io), 3 TXD/PCINT17/PD1 (io), 4 INT0/PCINT18/PD2 (io), 5 OC2B/INT1/PCINT19/PD3 (io), 6 XCK/T0/PCINT20/PD4 (io), 7 Vcc, 8 GND, 9 PB6/PCINT6/TOSC1/XTAL1 (io), 10 PB7/PCINT7/TOSC2/XTAL2 (io), 11 OC0B/T1/PCINT21/PD5 (io), 12 OC0A/AIN0/PCINT22/PD6 (io), 13 AIN1/PCINT23/PD7 (io), 14 PB0/PCINT0/CLKO/ICP1 (io), 15 PB1/PCINT1/OC1A (io), 16 PB2/PCINT2/OC1B/~{SS} (io), 17 PB3/PCINT3/OC2A/MOSI (io), 18 PB4/PCINT4/MISO (io), 19 PB5/PCINT5/SCK (io), 20 AVcc, 21 AREF, 22 GND, 23 PC0/PCINT8/ADC0 (io), 24 PC1/PCINT9/ADC1 (io), 25 PC2/PCINT10/ADC2 (io), 26 PC3/PCINT11/ADC3 (io), 27 PC4/PCINT12/ADC4/SDA (io), 28 PC5/PCINT13/ADC5/SCL (io)

## ATtiny13-20PU
designator U?
Atmel 8-bit AVR Microcontroller with 1 KB In-System Programmable Flash; ADC Channel: 4; Analog Comparator: 1; Clock Frequency: 0 - 20 MHz; Debug: debugWire; EEPROM Memory: 64 B; Flash Memory: 1 KB; I/O Pins: 6; PWM Channel: 2; Serial USI: 0; Supply Voltage (Vdd): 2.7 - 5.5 V; SRAM Memory: 64 B; Timer 8 bits: 1
footprint DIP08-300(100) (DIP; 8 Leads; Row Spacing 7.62 mm; Pitch 2.54 mm; 3D CircuitWorks)
pins: 1 (~{RESET}/dW/ADC0/PCINT5) PB5 (io), 2 (CLKI/ADC3/PCINT3) PB3 (io), 3 (ADC2/PCINT4) PB4 (io), 4 GND (power), 5 (OC0A/MOSI/AIN0/PCINT0) PB0 (io), 6 (INT0/OC0B/MISO/AIN1/PCINT1) PB1 (io), 7 (T0/SCK/ADC1/PCINT2) PB2 (io), 8 Vcc (power)